# Altium schematic symbol library AudioMoth 1.1.SCHLIB: 220 symbols (part 1 of 3)
Pins are listed as number, name and electrical type; pins without a type are passive.

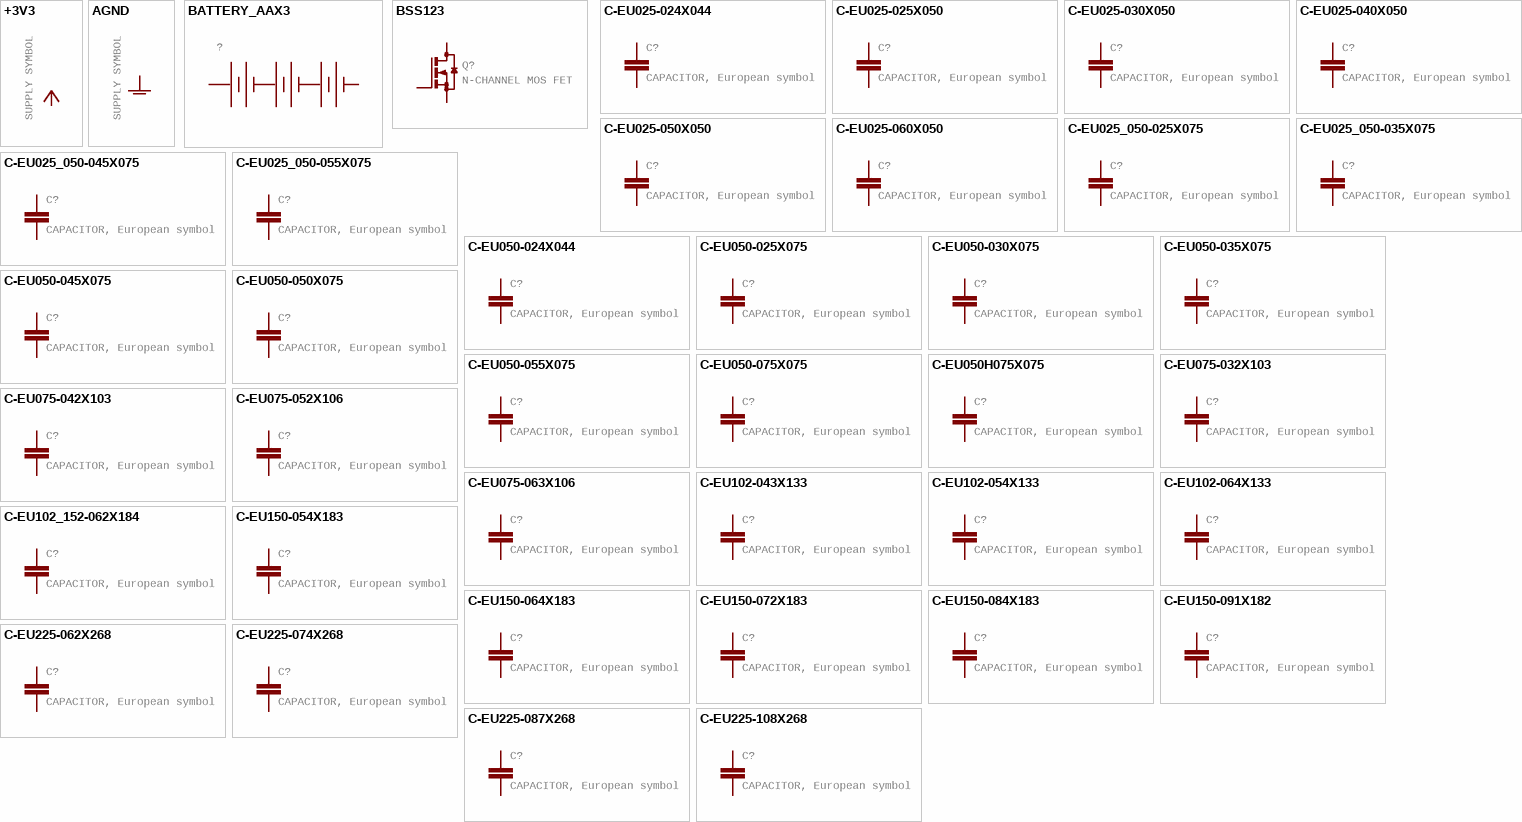
[diagram p0: symbols +3V3 to C-EU225-108X268]

## +3V3
designator +3V3?, comment SUPPLY SYMBOL
GateName_1: G$1; SymbolName_1: +3V3; LibraryName: AudioMoth 1.1.0; DeviceSetName: +3V3
pins: ?1 +3V3 (power)

## AGND
designator AGND?, comment SUPPLY SYMBOL
GateName_1: VR1; SymbolName_1: AGND; LibraryName: AudioMoth 1.1.0; DeviceSetName: AGND
pins: ?1 AGND (power)

## BATTERY_AAX3
designator ?
GateName_1: G$1; SymbolName_1: BATTX3; DeviceSetName: BATTERY_AAX3; LibraryName: AudioMoth 1.1.0; Package: BATTERY-AAX3
footprint BATTERY-AAX3
pins: GND@2 - (power), PWR@1 + (power)

## BSS123
designator Q?, comment N-CHANNEL MOS FET
GateName_1: G$1; SymbolName_1: N-MOS; DeviceSetName: BSS123; LibraryName: AudioMoth 1.1.0; Package: SOT23
footprint SOT23
pins: 1 G, 2 S, 3 D

## C-EU025-024X044
designator C?, comment CAPACITOR, European symbol
GateName_1: G$1; SymbolName_1: C-EU; DeviceName: 025-024X044; LibraryName: AudioMoth 1.1.0; DeviceSetName: C-EU; Package: C025-024X044
footprint C025-024X044
pins: 1, 2

## C-EU025-025X050
designator C?, comment CAPACITOR, European symbol
GateName_1: G$1; SymbolName_1: C-EU; DeviceName: 025-025X050; LibraryName: AudioMoth 1.1.0; DeviceSetName: C-EU; Package: C025-025X050
footprint C025-025X050
pins: 1, 2

## C-EU025-030X050
designator C?, comment CAPACITOR, European symbol
GateName_1: G$1; SymbolName_1: C-EU; DeviceName: 025-030X050; LibraryName: AudioMoth 1.1.0; DeviceSetName: C-EU; Package: C025-030X050
footprint C025-030X050
pins: 1, 2

## C-EU025-040X050
designator C?, comment CAPACITOR, European symbol
GateName_1: G$1; SymbolName_1: C-EU; DeviceName: 025-040X050; LibraryName: AudioMoth 1.1.0; DeviceSetName: C-EU; Package: C025-040X050
footprint C025-040X050
pins: 1, 2

## C-EU025-050X050
designator C?, comment CAPACITOR, European symbol
GateName_1: G$1; SymbolName_1: C-EU; DeviceName: 025-050X050; LibraryName: AudioMoth 1.1.0; DeviceSetName: C-EU; Package: C025-050X050
footprint C025-050X050
pins: 1, 2

## C-EU025-060X050
designator C?, comment CAPACITOR, European symbol
GateName_1: G$1; SymbolName_1: C-EU; DeviceName: 025-060X050; LibraryName: AudioMoth 1.1.0; DeviceSetName: C-EU; Package: C025-060X050
footprint C025-060X050
pins: 1, 2

## C-EU025_050-025X075
designator C?, comment CAPACITOR, European symbol
GateName_1: G$1; SymbolName_1: C-EU; DeviceName: 025_050-025X075; LibraryName: AudioMoth 1.1.0; DeviceSetName: C-EU; Package: C025_050-025X075
footprint C025_050-025X075
pins: 1, 2

## C-EU025_050-035X075
designator C?, comment CAPACITOR, European symbol
GateName_1: G$1; SymbolName_1: C-EU; DeviceName: 025_050-035X075; LibraryName: AudioMoth 1.1.0; DeviceSetName: C-EU; Package: C025_050-035X075
footprint C025_050-035X075
pins: 1, 2

## C-EU025_050-045X075
designator C?, comment CAPACITOR, European symbol
GateName_1: G$1; SymbolName_1: C-EU; DeviceName: 025_050-045X075; LibraryName: AudioMoth 1.1.0; DeviceSetName: C-EU; Package: C025_050-045X075
footprint C025_050-045X075
pins: 1, 2

## C-EU025_050-055X075
designator C?, comment CAPACITOR, European symbol
GateName_1: G$1; SymbolName_1: C-EU; DeviceName: 025_050-055X075; LibraryName: AudioMoth 1.1.0; DeviceSetName: C-EU; Package: C025_050-055X075
footprint C025_050-055X075
pins: 1, 2

## C-EU050-024X044
designator C?, comment CAPACITOR, European symbol
GateName_1: G$1; SymbolName_1: C-EU; DeviceName: 050-024X044; LibraryName: AudioMoth 1.1.0; DeviceSetName: C-EU; Package: C050-024X044
footprint C050-024X044
pins: 1, 2

## C-EU050-025X075
designator C?, comment CAPACITOR, European symbol
GateName_1: G$1; SymbolName_1: C-EU; DeviceName: 050-025X075; LibraryName: AudioMoth 1.1.0; DeviceSetName: C-EU; Package: C050-025X075
footprint C050-025X075
pins: 1, 2

## C-EU050-030X075
designator C?, comment CAPACITOR, European symbol
GateName_1: G$1; SymbolName_1: C-EU; DeviceName: 050-030X075; LibraryName: AudioMoth 1.1.0; DeviceSetName: C-EU; Package: C050-030X075
footprint C050-030X075
pins: 1, 2

## C-EU050-035X075
designator C?, comment CAPACITOR, European symbol
GateName_1: G$1; SymbolName_1: C-EU; DeviceName: 050-035X075; LibraryName: AudioMoth 1.1.0; DeviceSetName: C-EU; Package: C050-035X075
footprint C050-035X075
pins: 1, 2

## C-EU050-045X075
designator C?, comment CAPACITOR, European symbol
GateName_1: G$1; SymbolName_1: C-EU; DeviceName: 050-045X075; LibraryName: AudioMoth 1.1.0; DeviceSetName: C-EU; Package: C050-045X075
footprint C050-045X075
pins: 1, 2

## C-EU050-050X075
designator C?, comment CAPACITOR, European symbol
GateName_1: G$1; SymbolName_1: C-EU; DeviceName: 050-050X075; LibraryName: AudioMoth 1.1.0; DeviceSetName: C-EU; Package: C050-050X075
footprint C050-050X075
pins: 1, 2

## C-EU050-055X075
designator C?, comment CAPACITOR, European symbol
GateName_1: G$1; SymbolName_1: C-EU; DeviceName: 050-055X075; LibraryName: AudioMoth 1.1.0; DeviceSetName: C-EU; Package: C050-055X075
footprint C050-055X075
pins: 1, 2

## C-EU050-075X075
designator C?, comment CAPACITOR, European symbol
GateName_1: G$1; SymbolName_1: C-EU; DeviceName: 050-075X075; LibraryName: AudioMoth 1.1.0; DeviceSetName: C-EU; Package: C050-075X075
footprint C050-075X075
pins: 1, 2

## C-EU050H075X075
designator C?, comment CAPACITOR, European symbol
GateName_1: G$1; SymbolName_1: C-EU; DeviceName: 050H075X075; LibraryName: AudioMoth 1.1.0; DeviceSetName: C-EU; Package: C050H075X075
footprint C050H075X075
pins: 1, 2

## C-EU075-032X103
designator C?, comment CAPACITOR, European symbol
GateName_1: G$1; SymbolName_1: C-EU; DeviceName: 075-032X103; LibraryName: AudioMoth 1.1.0; DeviceSetName: C-EU; Package: C075-032X103
footprint C075-032X103
pins: 1, 2

## C-EU075-042X103
designator C?, comment CAPACITOR, European symbol
GateName_1: G$1; SymbolName_1: C-EU; DeviceName: 075-042X103; LibraryName: AudioMoth 1.1.0; DeviceSetName: C-EU; Package: C075-042X103
footprint C075-042X103
pins: 1, 2

## C-EU075-052X106
designator C?, comment CAPACITOR, European symbol
GateName_1: G$1; SymbolName_1: C-EU; DeviceName: 075-052X106; LibraryName: AudioMoth 1.1.0; DeviceSetName: C-EU; Package: C075-052X106
footprint C075-052X106
pins: 1, 2

## C-EU075-063X106
designator C?, comment CAPACITOR, European symbol
GateName_1: G$1; SymbolName_1: C-EU; DeviceName: 075-063X106; LibraryName: AudioMoth 1.1.0; DeviceSetName: C-EU; Package: C075-063X106
footprint C075-063X106
pins: 1, 2

## C-EU102-043X133
designator C?, comment CAPACITOR, European symbol
GateName_1: G$1; SymbolName_1: C-EU; DeviceName: 102-043X133; LibraryName: AudioMoth 1.1.0; DeviceSetName: C-EU; Package: C102-043X133
footprint C102-043X133
pins: 1, 2

## C-EU102-054X133
designator C?, comment CAPACITOR, European symbol
GateName_1: G$1; SymbolName_1: C-EU; DeviceName: 102-054X133; LibraryName: AudioMoth 1.1.0; DeviceSetName: C-EU; Package: C102-054X133
footprint C102-054X133
pins: 1, 2

## C-EU102-064X133
designator C?, comment CAPACITOR, European symbol
GateName_1: G$1; SymbolName_1: C-EU; DeviceName: 102-064X133; LibraryName: AudioMoth 1.1.0; DeviceSetName: C-EU; Package: C102-064X133
footprint C102-064X133
pins: 1, 2

## C-EU102_152-062X184
designator C?, comment CAPACITOR, European symbol
GateName_1: G$1; SymbolName_1: C-EU; DeviceName: 102_152-062X184; LibraryName: AudioMoth 1.1.0; DeviceSetName: C-EU; Package: C102_152-062X184
footprint C102_152-062X184
pins: 1, 2

## C-EU150-054X183
designator C?, comment CAPACITOR, European symbol
GateName_1: G$1; SymbolName_1: C-EU; DeviceName: 150-054X183; LibraryName: AudioMoth 1.1.0; DeviceSetName: C-EU; Package: C150-054X183
footprint C150-054X183
pins: 1, 2

## C-EU150-064X183
designator C?, comment CAPACITOR, European symbol
GateName_1: G$1; SymbolName_1: C-EU; DeviceName: 150-064X183; LibraryName: AudioMoth 1.1.0; DeviceSetName: C-EU; Package: C150-064X183
footprint C150-064X183
pins: 1, 2

## C-EU150-072X183
designator C?, comment CAPACITOR, European symbol
GateName_1: G$1; SymbolName_1: C-EU; DeviceName: 150-072X183; LibraryName: AudioMoth 1.1.0; DeviceSetName: C-EU; Package: C150-072X183
footprint C150-072X183
pins: 1, 2

## C-EU150-084X183
designator C?, comment CAPACITOR, European symbol
GateName_1: G$1; SymbolName_1: C-EU; DeviceName: 150-084X183; LibraryName: AudioMoth 1.1.0; DeviceSetName: C-EU; Package: C150-084X183
footprint C150-084X183
pins: 1, 2

## C-EU150-091X182
designator C?, comment CAPACITOR, European symbol
GateName_1: G$1; SymbolName_1: C-EU; DeviceName: 150-091X182; LibraryName: AudioMoth 1.1.0; DeviceSetName: C-EU; Package: C150-091X182
footprint C150-091X182
pins: 1, 2

## C-EU225-062X268
designator C?, comment CAPACITOR, European symbol
GateName_1: G$1; SymbolName_1: C-EU; DeviceName: 225-062X268; LibraryName: AudioMoth 1.1.0; DeviceSetName: C-EU; Package: C225-062X268
footprint C225-062X268
pins: 1, 2

## C-EU225-074X268
designator C?, comment CAPACITOR, European symbol
GateName_1: G$1; SymbolName_1: C-EU; DeviceName: 225-074X268; LibraryName: AudioMoth 1.1.0; DeviceSetName: C-EU; Package: C225-074X268
footprint C225-074X268
pins: 1, 2

## C-EU225-087X268
designator C?, comment CAPACITOR, European symbol
GateName_1: G$1; SymbolName_1: C-EU; DeviceName: 225-087X268; LibraryName: AudioMoth 1.1.0; DeviceSetName: C-EU; Package: C225-087X268
footprint C225-087X268
pins: 1, 2

## C-EU225-108X268
designator C?, comment CAPACITOR, European symbol
GateName_1: G$1; SymbolName_1: C-EU; DeviceName: 225-108X268; LibraryName: AudioMoth 1.1.0; DeviceSetName: C-EU; Package: C225-108X268
footprint C225-108X268
pins: 1, 2

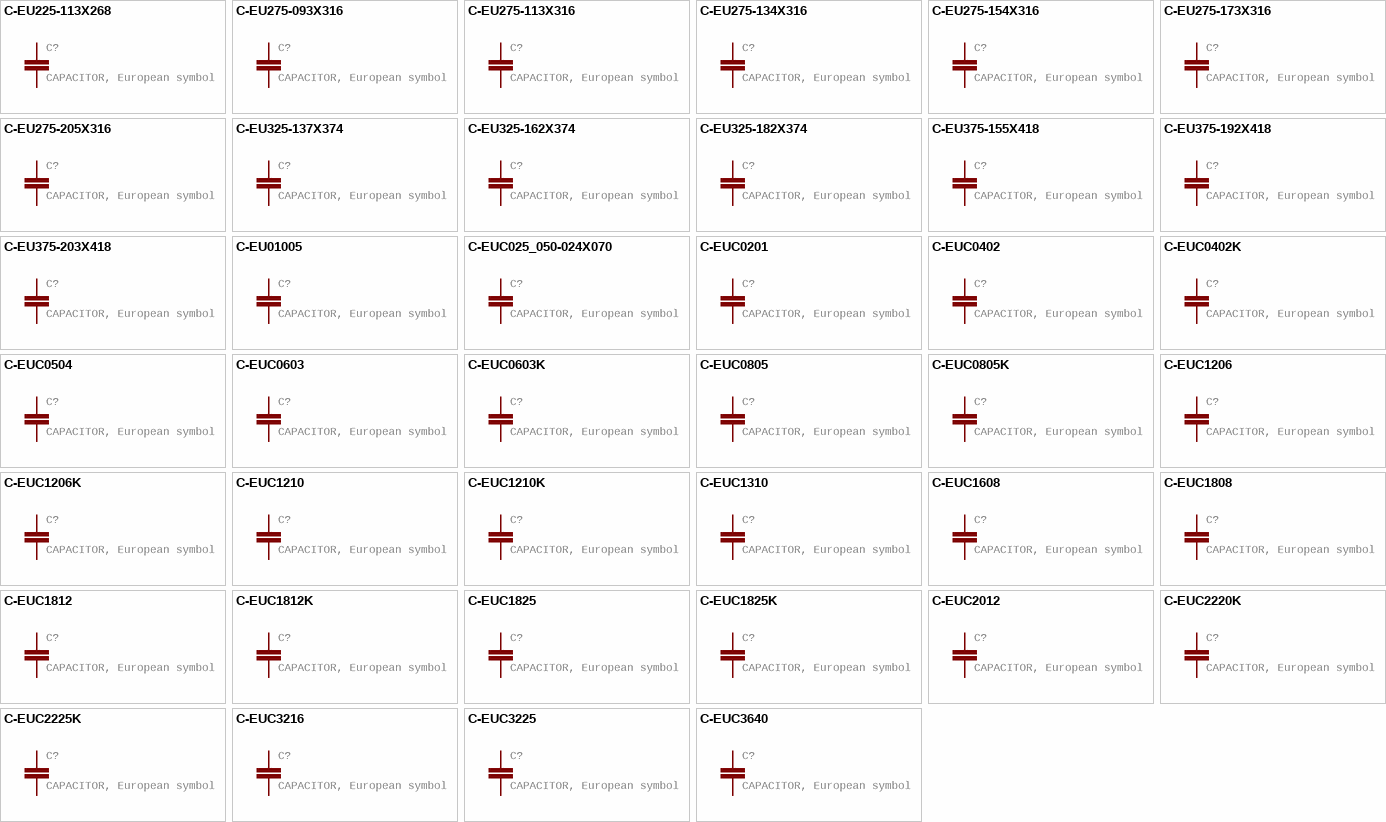
[diagram p1: symbols C-EU225-113X268 to C-EUC3640]

## C-EU225-113X268
designator C?, comment CAPACITOR, European symbol
GateName_1: G$1; SymbolName_1: C-EU; DeviceName: 225-113X268; LibraryName: AudioMoth 1.1.0; DeviceSetName: C-EU; Package: C225-113X268
footprint C225-113X268
pins: 1, 2

## C-EU275-093X316
designator C?, comment CAPACITOR, European symbol
GateName_1: G$1; SymbolName_1: C-EU; DeviceName: 275-093X316; LibraryName: AudioMoth 1.1.0; DeviceSetName: C-EU; Package: C275-093X316
footprint C275-093X316
pins: 1, 2

## C-EU275-113X316
designator C?, comment CAPACITOR, European symbol
GateName_1: G$1; SymbolName_1: C-EU; DeviceName: 275-113X316; LibraryName: AudioMoth 1.1.0; DeviceSetName: C-EU; Package: C275-113X316
footprint C275-113X316
pins: 1, 2

## C-EU275-134X316
designator C?, comment CAPACITOR, European symbol
GateName_1: G$1; SymbolName_1: C-EU; DeviceName: 275-134X316; LibraryName: AudioMoth 1.1.0; DeviceSetName: C-EU; Package: C275-134X316
footprint C275-134X316
pins: 1, 2

## C-EU275-154X316
designator C?, comment CAPACITOR, European symbol
GateName_1: G$1; SymbolName_1: C-EU; DeviceName: 275-154X316; LibraryName: AudioMoth 1.1.0; DeviceSetName: C-EU; Package: C275-154X316
footprint C275-154X316
pins: 1, 2

## C-EU275-173X316
designator C?, comment CAPACITOR, European symbol
GateName_1: G$1; SymbolName_1: C-EU; DeviceName: 275-173X316; LibraryName: AudioMoth 1.1.0; DeviceSetName: C-EU; Package: C275-173X316
footprint C275-173X316
pins: 1, 2

## C-EU275-205X316
designator C?, comment CAPACITOR, European symbol
GateName_1: G$1; SymbolName_1: C-EU; DeviceName: 275-205X316; LibraryName: AudioMoth 1.1.0; DeviceSetName: C-EU; Package: C275-205X316
footprint C275-205X316
pins: 1, 2

## C-EU325-137X374
designator C?, comment CAPACITOR, European symbol
GateName_1: G$1; SymbolName_1: C-EU; DeviceName: 325-137X374; LibraryName: AudioMoth 1.1.0; DeviceSetName: C-EU; Package: C325-137X374
footprint C325-137X374
pins: 1, 2

## C-EU325-162X374
designator C?, comment CAPACITOR, European symbol
GateName_1: G$1; SymbolName_1: C-EU; DeviceName: 325-162X374; LibraryName: AudioMoth 1.1.0; DeviceSetName: C-EU; Package: C325-162X374
footprint C325-162X374
pins: 1, 2

## C-EU325-182X374
designator C?, comment CAPACITOR, European symbol
GateName_1: G$1; SymbolName_1: C-EU; DeviceName: 325-182X374; LibraryName: AudioMoth 1.1.0; DeviceSetName: C-EU; Package: C325-182X374
footprint C325-182X374
pins: 1, 2

## C-EU375-155X418
designator C?, comment CAPACITOR, European symbol
GateName_1: G$1; SymbolName_1: C-EU; DeviceName: 375-155X418; LibraryName: AudioMoth 1.1.0; DeviceSetName: C-EU; Package: C375-155X418
footprint C375-155X418
pins: 1, 2

## C-EU375-192X418
designator C?, comment CAPACITOR, European symbol
GateName_1: G$1; SymbolName_1: C-EU; DeviceName: 375-192X418; LibraryName: AudioMoth 1.1.0; DeviceSetName: C-EU; Package: C375-192X418
footprint C375-192X418
pins: 1, 2

## C-EU375-203X418
designator C?, comment CAPACITOR, European symbol
GateName_1: G$1; SymbolName_1: C-EU; DeviceName: 375-203X418; LibraryName: AudioMoth 1.1.0; DeviceSetName: C-EU; Package: C375-203X418
footprint C375-203X418
pins: 1, 2

## C-EU01005
designator C?, comment CAPACITOR, European symbol
GateName_1: G$1; SymbolName_1: C-EU; DeviceName: 01005; LibraryName: AudioMoth 1.1.0; DeviceSetName: C-EU; Package: C01005
footprint C01005
pins: 1, 2

## C-EUC025_050-024X070
designator C?, comment CAPACITOR, European symbol
GateName_1: G$1; SymbolName_1: C-EU; DeviceName: C025_050-024X070; LibraryName: AudioMoth 1.1.0; DeviceSetName: C-EU; Package: C025_050-024X070
footprint C025_050-024X070
pins: 1, 2

## C-EUC0201
designator C?, comment CAPACITOR, European symbol
GateName_1: G$1; SymbolName_1: C-EU; DeviceName: C0201; LibraryName: AudioMoth 1.1.0; DeviceSetName: C-EU; Package: C0201
footprint C0201
pins: 1, 2

## C-EUC0402
designator C?, comment CAPACITOR, European symbol
GateName_1: G$1; SymbolName_1: C-EU; DeviceName: C0402; LibraryName: AudioMoth 1.1.0; DeviceSetName: C-EU; Package: C0402
footprint C0402
pins: 1, 2

## C-EUC0402K
designator C?, comment CAPACITOR, European symbol
GateName_1: G$1; SymbolName_1: C-EU; DeviceName: C0402K; LibraryName: AudioMoth 1.1.0; DeviceSetName: C-EU; Package: C0402K
footprint C0402K
pins: 1, 2

## C-EUC0504
designator C?, comment CAPACITOR, European symbol
GateName_1: G$1; SymbolName_1: C-EU; DeviceName: C0504; LibraryName: AudioMoth 1.1.0; DeviceSetName: C-EU; Package: C0504
footprint C0504
pins: 1, 2

## C-EUC0603
designator C?, comment CAPACITOR, European symbol
GateName_1: G$1; SymbolName_1: C-EU; DeviceName: C0603; LibraryName: AudioMoth 1.1.0; DeviceSetName: C-EU; Package: C0603
footprint C0603
pins: 1, 2

## C-EUC0603K
designator C?, comment CAPACITOR, European symbol
GateName_1: G$1; SymbolName_1: C-EU; DeviceName: C0603K; LibraryName: AudioMoth 1.1.0; DeviceSetName: C-EU; Package: C0603K
footprint C0603K
pins: 1, 2

## C-EUC0805
designator C?, comment CAPACITOR, European symbol
GateName_1: G$1; SymbolName_1: C-EU; DeviceName: C0805; LibraryName: AudioMoth 1.1.0; DeviceSetName: C-EU; Package: C0805
footprint C0805
pins: 1, 2

## C-EUC0805K
designator C?, comment CAPACITOR, European symbol
GateName_1: G$1; SymbolName_1: C-EU; DeviceName: C0805K; LibraryName: AudioMoth 1.1.0; DeviceSetName: C-EU; Package: C0805K
footprint C0805K
pins: 1, 2

## C-EUC1206
designator C?, comment CAPACITOR, European symbol
GateName_1: G$1; SymbolName_1: C-EU; DeviceName: C1206; LibraryName: AudioMoth 1.1.0; DeviceSetName: C-EU; Package: C1206
footprint C1206
pins: 1, 2

## C-EUC1206K
designator C?, comment CAPACITOR, European symbol
GateName_1: G$1; SymbolName_1: C-EU; DeviceName: C1206K; LibraryName: AudioMoth 1.1.0; DeviceSetName: C-EU; Package: C1206K
footprint C1206K
pins: 1, 2

## C-EUC1210
designator C?, comment CAPACITOR, European symbol
GateName_1: G$1; SymbolName_1: C-EU; DeviceName: C1210; LibraryName: AudioMoth 1.1.0; DeviceSetName: C-EU; Package: C1210
footprint C1210
pins: 1, 2

## C-EUC1210K
designator C?, comment CAPACITOR, European symbol
GateName_1: G$1; SymbolName_1: C-EU; DeviceName: C1210K; LibraryName: AudioMoth 1.1.0; DeviceSetName: C-EU; Package: C1210K
footprint C1210K
pins: 1, 2

## C-EUC1310
designator C?, comment CAPACITOR, European symbol
GateName_1: G$1; SymbolName_1: C-EU; DeviceName: C1310; LibraryName: AudioMoth 1.1.0; DeviceSetName: C-EU; Package: C1310
footprint C1310
pins: 1, 2

## C-EUC1608
designator C?, comment CAPACITOR, European symbol
GateName_1: G$1; SymbolName_1: C-EU; DeviceName: C1608; LibraryName: AudioMoth 1.1.0; DeviceSetName: C-EU; Package: C1608
footprint C1608
pins: 1, 2

## C-EUC1808
designator C?, comment CAPACITOR, European symbol
GateName_1: G$1; SymbolName_1: C-EU; DeviceName: C1808; LibraryName: AudioMoth 1.1.0; DeviceSetName: C-EU; Package: C1808
footprint C1808
pins: 1, 2

## C-EUC1812
designator C?, comment CAPACITOR, European symbol
GateName_1: G$1; SymbolName_1: C-EU; DeviceName: C1812; LibraryName: AudioMoth 1.1.0; DeviceSetName: C-EU; Package: C1812
footprint C1812
pins: 1, 2

## C-EUC1812K
designator C?, comment CAPACITOR, European symbol
GateName_1: G$1; SymbolName_1: C-EU; DeviceName: C1812K; LibraryName: AudioMoth 1.1.0; DeviceSetName: C-EU; Package: C1812K
footprint C1812K
pins: 1, 2

## C-EUC1825
designator C?, comment CAPACITOR, European symbol
GateName_1: G$1; SymbolName_1: C-EU; DeviceName: C1825; LibraryName: AudioMoth 1.1.0; DeviceSetName: C-EU; Package: C1825
footprint C1825
pins: 1, 2

## C-EUC1825K
designator C?, comment CAPACITOR, European symbol
GateName_1: G$1; SymbolName_1: C-EU; DeviceName: C1825K; LibraryName: AudioMoth 1.1.0; DeviceSetName: C-EU; Package: C1825K
footprint C1825K
pins: 1, 2

## C-EUC2012
designator C?, comment CAPACITOR, European symbol
GateName_1: G$1; SymbolName_1: C-EU; DeviceName: C2012; LibraryName: AudioMoth 1.1.0; DeviceSetName: C-EU; Package: C2012
footprint C2012
pins: 1, 2

## C-EUC2220K
designator C?, comment CAPACITOR, European symbol
GateName_1: G$1; SymbolName_1: C-EU; DeviceName: C2220K; LibraryName: AudioMoth 1.1.0; DeviceSetName: C-EU; Package: C2220K
footprint C2220K
pins: 1, 2

## C-EUC2225K
designator C?, comment CAPACITOR, European symbol
GateName_1: G$1; SymbolName_1: C-EU; DeviceName: C2225K; LibraryName: AudioMoth 1.1.0; DeviceSetName: C-EU; Package: C2225K
footprint C2225K
pins: 1, 2

## C-EUC3216
designator C?, comment CAPACITOR, European symbol
GateName_1: G$1; SymbolName_1: C-EU; DeviceName: C3216; LibraryName: AudioMoth 1.1.0; DeviceSetName: C-EU; Package: C3216
footprint C3216
pins: 1, 2

## C-EUC3225
designator C?, comment CAPACITOR, European symbol
GateName_1: G$1; SymbolName_1: C-EU; DeviceName: C3225; LibraryName: AudioMoth 1.1.0; DeviceSetName: C-EU; Package: C3225
footprint C3225
pins: 1, 2

## C-EUC3640
designator C?, comment CAPACITOR, European symbol
GateName_1: G$1; SymbolName_1: C-EU; DeviceName: C3640; LibraryName: AudioMoth 1.1.0; DeviceSetName: C-EU; Package: C3640
footprint C3640
pins: 1, 2

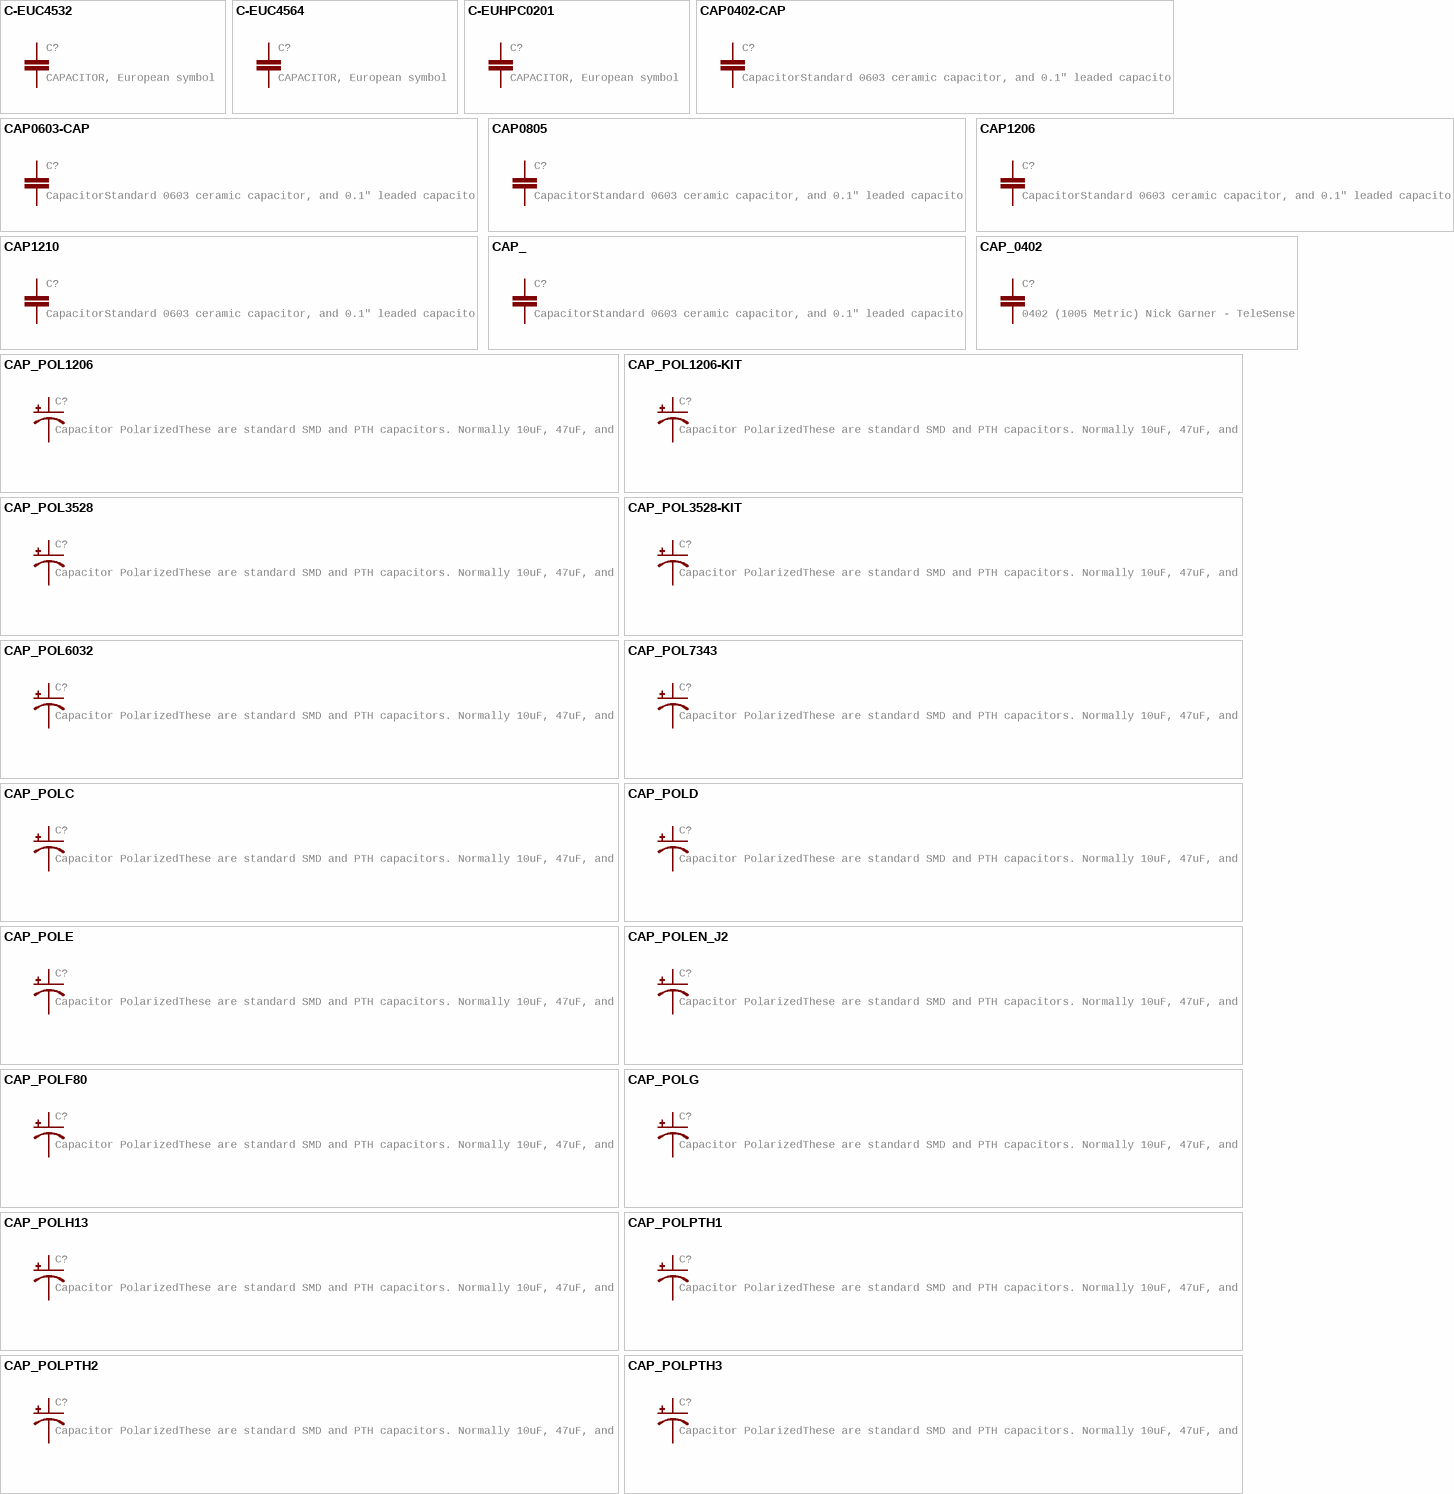
[diagram p2: symbols C-EUC4532 to CAP_POLPTH3]

## C-EUC4532
designator C?, comment CAPACITOR, European symbol
GateName_1: G$1; SymbolName_1: C-EU; DeviceName: C4532; LibraryName: AudioMoth 1.1.0; DeviceSetName: C-EU; Package: C4532
footprint C4532
pins: 1, 2

## C-EUC4564
designator C?, comment CAPACITOR, European symbol
GateName_1: G$1; SymbolName_1: C-EU; DeviceName: C4564; LibraryName: AudioMoth 1.1.0; DeviceSetName: C-EU; Package: C4564
footprint C4564
pins: 1, 2

## C-EUHPC0201
designator C?, comment CAPACITOR, European symbol
GateName_1: G$1; SymbolName_1: C-EU; DeviceName: HPC0201; LibraryName: AudioMoth 1.1.0; DeviceSetName: C-EU; Package: HPC0201
footprint HPC0201
pins: 1, 2

## CAP0402-CAP
designator C?, comment CapacitorStandard 0603 ceramic capacitor, and 0.1" leaded capacitor.
GateName_1: G$1; SymbolName_1: CAP; DeviceName: 0402-CAP; LibraryName: AudioMoth 1.1.0; DeviceSetName: CAP; Package: 0402-CAP
footprint 0402-CAP
pins: 1, 2

## CAP0603-CAP
designator C?, comment CapacitorStandard 0603 ceramic capacitor, and 0.1" leaded capacitor.
GateName_1: G$1; SymbolName_1: CAP; DeviceName: 0603-CAP; LibraryName: AudioMoth 1.1.0; DeviceSetName: CAP; Package: 0603-CAP
footprint 0603-CAP
pins: 1, 2

## CAP0805
designator C?, comment CapacitorStandard 0603 ceramic capacitor, and 0.1" leaded capacitor.
GateName_1: G$1; SymbolName_1: CAP; DeviceName: 0805; LibraryName: AudioMoth 1.1.0; DeviceSetName: CAP; Package: 0805
footprint 0805
pins: 1, 2

## CAP1206
designator C?, comment CapacitorStandard 0603 ceramic capacitor, and 0.1" leaded capacitor.
GateName_1: G$1; SymbolName_1: CAP; DeviceName: 1206; LibraryName: AudioMoth 1.1.0; DeviceSetName: CAP; Package: 1206
footprint 1206
pins: 1, 2

## CAP1210
designator C?, comment CapacitorStandard 0603 ceramic capacitor, and 0.1" leaded capacitor.
GateName_1: G$1; SymbolName_1: CAP; DeviceName: 1210; LibraryName: AudioMoth 1.1.0; DeviceSetName: CAP; Package: 1210
footprint 1210
pins: 1, 2

## CAP_
designator C?, comment CapacitorStandard 0603 ceramic capacitor, and 0.1" leaded capacitor.
GateName_1: G$1; SymbolName_1: CAP; DeviceName: _; LibraryName: AudioMoth 1.1.0; DeviceSetName: CAP; Package: AXIAL-5MM
footprint AXIAL-5MM
pins: P$1 1, P$2 2

## CAP_0402
designator C?, comment 0402 (1005 Metric) Nick Garner - TeleSense
GateName_1: G$1; SymbolName_1: CAP; DeviceSetName: CAP_0402; LibraryName: AudioMoth 1.1.0; Package: 0402
footprint 0402
pins: 1, 2

## CAP_POL1206
designator C?, comment Capacitor PolarizedThese are standard SMD and PTH capacitors. Normally 10uF, 47uF, and 100uF in electrolytic and tantalum varieties. Always verify the external diameter of the through hole cap, it varies with capacity, voltage, and manufacturer. The EIA devices should be standard.
GateName_1: G$1; SymbolName_1: CAP_POL; DeviceName: 1206; LibraryName: AudioMoth 1.1.0; DeviceSetName: CAP_POL; Package: EIA3216
footprint EIA3216
pins: A +, C -

## CAP_POL1206-KIT
designator C?, comment Capacitor PolarizedThese are standard SMD and PTH capacitors. Normally 10uF, 47uF, and 100uF in electrolytic and tantalum varieties. Always verify the external diameter of the through hole cap, it varies with capacity, voltage, and manufacturer. The EIA devices should be standard.
GateName_1: G$1; SymbolName_1: CAP_POL; DeviceName: 1206-KIT; LibraryName: AudioMoth 1.1.0; DeviceSetName: CAP_POL; Package: EIA3216-KIT
footprint EIA3216-KIT
pins: A +, C -

## CAP_POL3528
designator C?, comment Capacitor PolarizedThese are standard SMD and PTH capacitors. Normally 10uF, 47uF, and 100uF in electrolytic and tantalum varieties. Always verify the external diameter of the through hole cap, it varies with capacity, voltage, and manufacturer. The EIA devices should be standard.
GateName_1: G$1; SymbolName_1: CAP_POL; DeviceName: 3528; LibraryName: AudioMoth 1.1.0; DeviceSetName: CAP_POL; Package: EIA3528
footprint EIA3528
pins: A +, C -

## CAP_POL3528-KIT
designator C?, comment Capacitor PolarizedThese are standard SMD and PTH capacitors. Normally 10uF, 47uF, and 100uF in electrolytic and tantalum varieties. Always verify the external diameter of the through hole cap, it varies with capacity, voltage, and manufacturer. The EIA devices should be standard.
GateName_1: G$1; SymbolName_1: CAP_POL; DeviceName: 3528-KIT; LibraryName: AudioMoth 1.1.0; DeviceSetName: CAP_POL; Package: EIA3528-KIT
footprint EIA3528-KIT
pins: A +, C -

## CAP_POL6032
designator C?, comment Capacitor PolarizedThese are standard SMD and PTH capacitors. Normally 10uF, 47uF, and 100uF in electrolytic and tantalum varieties. Always verify the external diameter of the through hole cap, it varies with capacity, voltage, and manufacturer. The EIA devices should be standard.
GateName_1: G$1; SymbolName_1: CAP_POL; DeviceName: 6032; LibraryName: AudioMoth 1.1.0; DeviceSetName: CAP_POL; Package: EIA6032
footprint EIA6032
pins: P$1 +, P$2 -

## CAP_POL7343
designator C?, comment Capacitor PolarizedThese are standard SMD and PTH capacitors. Normally 10uF, 47uF, and 100uF in electrolytic and tantalum varieties. Always verify the external diameter of the through hole cap, it varies with capacity, voltage, and manufacturer. The EIA devices should be standard.
GateName_1: G$1; SymbolName_1: CAP_POL; DeviceName: 7343; LibraryName: AudioMoth 1.1.0; DeviceSetName: CAP_POL; Package: EIA7343
footprint EIA7343
pins: A +, C -

## CAP_POLC
designator C?, comment Capacitor PolarizedThese are standard SMD and PTH capacitors. Normally 10uF, 47uF, and 100uF in electrolytic and tantalum varieties. Always verify the external diameter of the through hole cap, it varies with capacity, voltage, and manufacturer. The EIA devices should be standard.
GateName_1: G$1; SymbolName_1: CAP_POL; DeviceName: C; LibraryName: AudioMoth 1.1.0; DeviceSetName: CAP_POL; Package: PANASONIC_C
footprint PANASONIC_C
pins: +, -

## CAP_POLD
designator C?, comment Capacitor PolarizedThese are standard SMD and PTH capacitors. Normally 10uF, 47uF, and 100uF in electrolytic and tantalum varieties. Always verify the external diameter of the through hole cap, it varies with capacity, voltage, and manufacturer. The EIA devices should be standard.
GateName_1: G$1; SymbolName_1: CAP_POL; DeviceName: D; LibraryName: AudioMoth 1.1.0; DeviceSetName: CAP_POL; Package: PANASONIC_D
footprint PANASONIC_D
pins: +, -

## CAP_POLE
designator C?, comment Capacitor PolarizedThese are standard SMD and PTH capacitors. Normally 10uF, 47uF, and 100uF in electrolytic and tantalum varieties. Always verify the external diameter of the through hole cap, it varies with capacity, voltage, and manufacturer. The EIA devices should be standard.
GateName_1: G$1; SymbolName_1: CAP_POL; DeviceName: E; LibraryName: AudioMoth 1.1.0; DeviceSetName: CAP_POL; Package: PANASONIC_E
footprint PANASONIC_E
pins: +, -

## CAP_POLEN_J2
designator C?, comment Capacitor PolarizedThese are standard SMD and PTH capacitors. Normally 10uF, 47uF, and 100uF in electrolytic and tantalum varieties. Always verify the external diameter of the through hole cap, it varies with capacity, voltage, and manufacturer. The EIA devices should be standard.
GateName_1: G$1; SymbolName_1: CAP_POL; DeviceName: EN_J2; LibraryName: AudioMoth 1.1.0; DeviceSetName: CAP_POL; Package: EN_J2
footprint EN_J2
pins: +, -

## CAP_POLF80
designator C?, comment Capacitor PolarizedThese are standard SMD and PTH capacitors. Normally 10uF, 47uF, and 100uF in electrolytic and tantalum varieties. Always verify the external diameter of the through hole cap, it varies with capacity, voltage, and manufacturer. The EIA devices should be standard.
GateName_1: G$1; SymbolName_1: CAP_POL; DeviceName: F80; LibraryName: AudioMoth 1.1.0; DeviceSetName: CAP_POL; Package: NIPPON_F80
footprint NIPPON_F80
pins: +, -

## CAP_POLG
designator C?, comment Capacitor PolarizedThese are standard SMD and PTH capacitors. Normally 10uF, 47uF, and 100uF in electrolytic and tantalum varieties. Always verify the external diameter of the through hole cap, it varies with capacity, voltage, and manufacturer. The EIA devices should be standard.
GateName_1: G$1; SymbolName_1: CAP_POL; DeviceName: G; LibraryName: AudioMoth 1.1.0; DeviceSetName: CAP_POL; Package: PANASONIC_G
footprint PANASONIC_G
pins: +, -

## CAP_POLH13
designator C?, comment Capacitor PolarizedThese are standard SMD and PTH capacitors. Normally 10uF, 47uF, and 100uF in electrolytic and tantalum varieties. Always verify the external diameter of the through hole cap, it varies with capacity, voltage, and manufacturer. The EIA devices should be standard.
GateName_1: G$1; SymbolName_1: CAP_POL; DeviceName: H13; LibraryName: AudioMoth 1.1.0; DeviceSetName: CAP_POL; Package: PANASONIC_H13
footprint PANASONIC_H13
pins: +, -

## CAP_POLPTH1
designator C?, comment Capacitor PolarizedThese are standard SMD and PTH capacitors. Normally 10uF, 47uF, and 100uF in electrolytic and tantalum varieties. Always verify the external diameter of the through hole cap, it varies with capacity, voltage, and manufacturer. The EIA devices should be standard.
GateName_1: G$1; SymbolName_1: CAP_POL; DeviceName: PTH1; LibraryName: AudioMoth 1.1.0; DeviceSetName: CAP_POL; Package: CPOL-RADIAL-100UF-25V
footprint CPOL-RADIAL-100UF-25V
pins: 1 +, 2 -

## CAP_POLPTH2
designator C?, comment Capacitor PolarizedThese are standard SMD and PTH capacitors. Normally 10uF, 47uF, and 100uF in electrolytic and tantalum varieties. Always verify the external diameter of the through hole cap, it varies with capacity, voltage, and manufacturer. The EIA devices should be standard.
GateName_1: G$1; SymbolName_1: CAP_POL; DeviceName: PTH2; LibraryName: AudioMoth 1.1.0; DeviceSetName: CAP_POL; Package: CPOL-RADIAL-10UF-25V
footprint CPOL-RADIAL-10UF-25V
pins: 1 +, 2 -

## CAP_POLPTH3
designator C?, comment Capacitor PolarizedThese are standard SMD and PTH capacitors. Normally 10uF, 47uF, and 100uF in electrolytic and tantalum varieties. Always verify the external diameter of the through hole cap, it varies with capacity, voltage, and manufacturer. The EIA devices should be standard.
GateName_1: G$1; SymbolName_1: CAP_POL; DeviceName: PTH3; LibraryName: AudioMoth 1.1.0; DeviceSetName: CAP_POL; Package: CPOL-RADIAL-1000UF-63V
footprint CPOL-RADIAL-1000UF-63V
pins: 1 +, 2 -

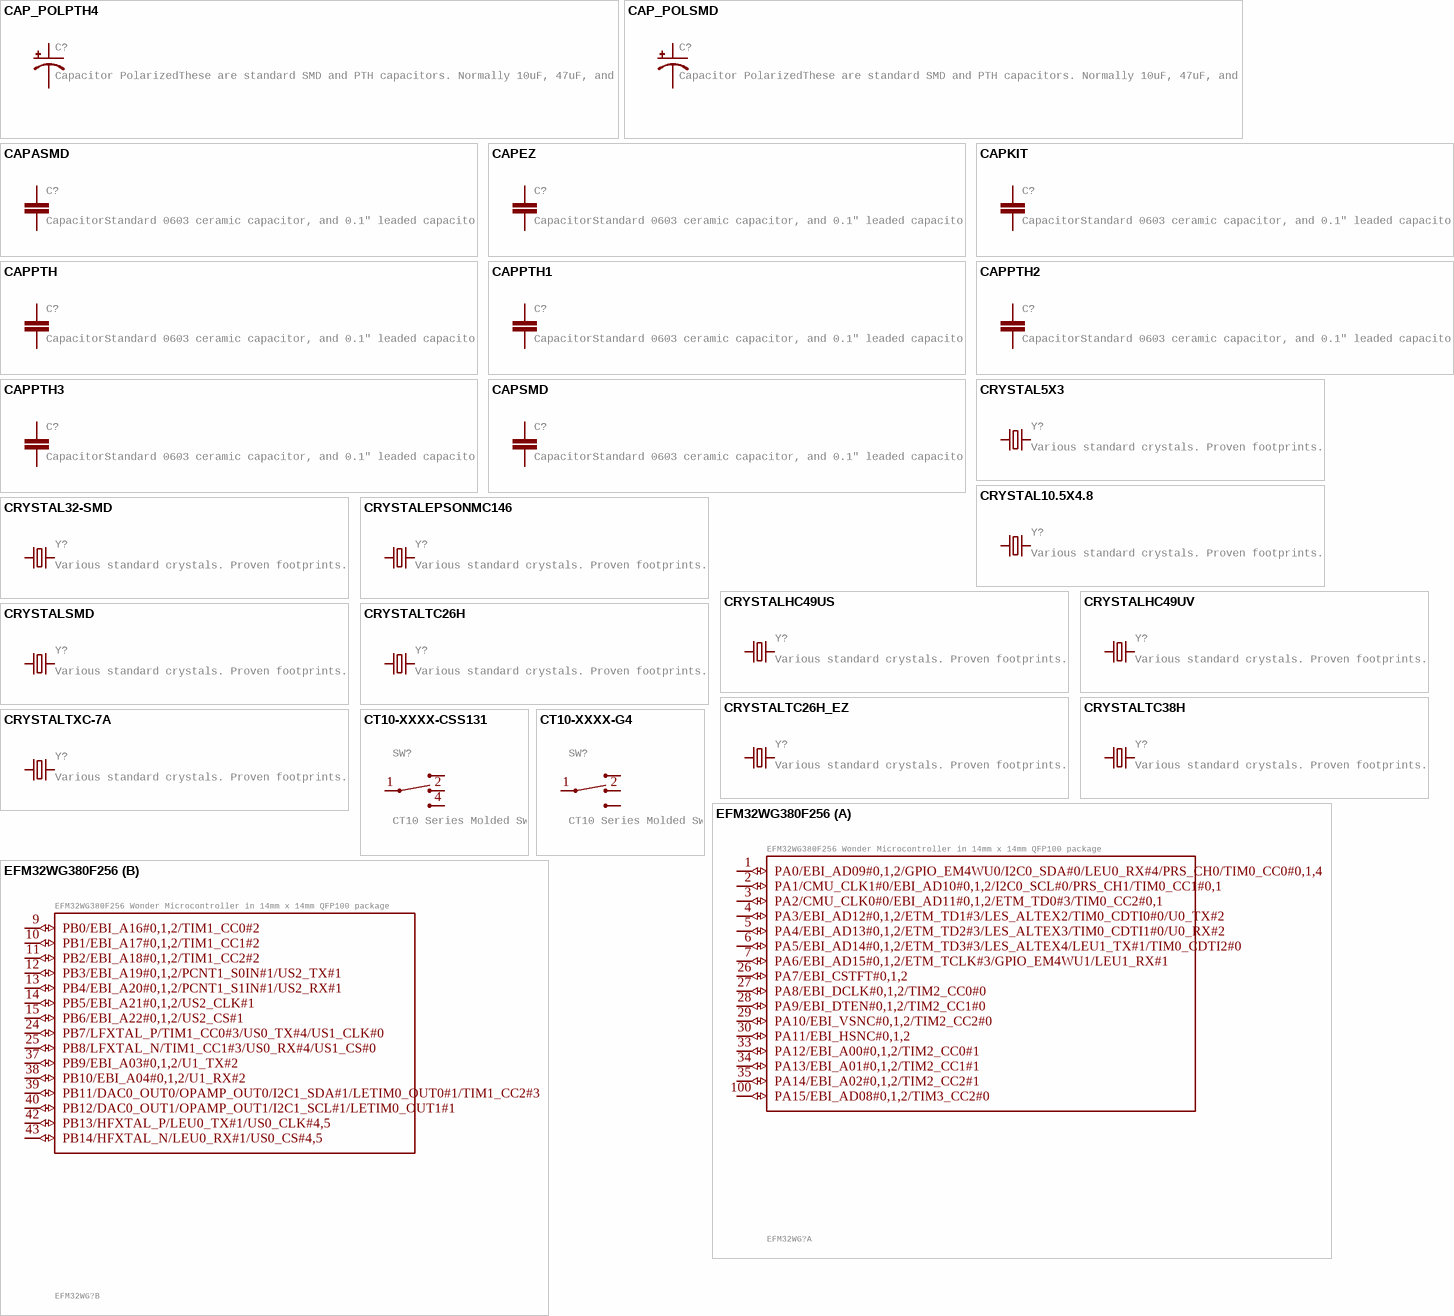
[diagram p3: symbols CAP_POLPTH4 to EFM32WG380F256]

## CAP_POLPTH4
designator C?, comment Capacitor PolarizedThese are standard SMD and PTH capacitors. Normally 10uF, 47uF, and 100uF in electrolytic and tantalum varieties. Always verify the external diameter of the through hole cap, it varies with capacity, voltage, and manufacturer. The EIA devices should be standard.
GateName_1: G$1; SymbolName_1: CAP_POL; DeviceName: PTH4; LibraryName: AudioMoth 1.1.0; DeviceSetName: CAP_POL; Package: CPOL-RADIAL-1000UF-25V
footprint CPOL-RADIAL-1000UF-25V
pins: 1 +, 2 -

## CAP_POLSMD
designator C?, comment Capacitor PolarizedThese are standard SMD and PTH capacitors. Normally 10uF, 47uF, and 100uF in electrolytic and tantalum varieties. Always verify the external diameter of the through hole cap, it varies with capacity, voltage, and manufacturer. The EIA devices should be standard.
GateName_1: G$1; SymbolName_1: CAP_POL; DeviceName: SMD; LibraryName: AudioMoth 1.1.0; DeviceSetName: CAP_POL; Package: VISHAY_C
footprint VISHAY_C
pins: +, -

## CAPASMD
designator C?, comment CapacitorStandard 0603 ceramic capacitor, and 0.1" leaded capacitor.
GateName_1: G$1; SymbolName_1: CAP; DeviceName: ASMD; LibraryName: AudioMoth 1.1.0; DeviceSetName: CAP; Package: CTZ3
footprint CTZ3
pins: + 1, - 2

## CAPEZ
designator C?, comment CapacitorStandard 0603 ceramic capacitor, and 0.1" leaded capacitor.
GateName_1: G$1; SymbolName_1: CAP; DeviceName: EZ; LibraryName: AudioMoth 1.1.0; DeviceSetName: CAP; Package: CAP-PTH-SMALLEZ
footprint CAP-PTH-SMALLEZ
pins: 1, 2

## CAPKIT
designator C?, comment CapacitorStandard 0603 ceramic capacitor, and 0.1" leaded capacitor.
GateName_1: G$1; SymbolName_1: CAP; DeviceName: KIT; LibraryName: AudioMoth 1.1.0; DeviceSetName: CAP; Package: CAP-PTH-SMALL-KIT
footprint CAP-PTH-SMALL-KIT
pins: 1, 2

## CAPPTH
designator C?, comment CapacitorStandard 0603 ceramic capacitor, and 0.1" leaded capacitor.
GateName_1: G$1; SymbolName_1: CAP; DeviceName: PTH; LibraryName: AudioMoth 1.1.0; DeviceSetName: CAP; Package: CAP-PTH-SMALL
footprint CAP-PTH-SMALL
pins: 1, 2

## CAPPTH1
designator C?, comment CapacitorStandard 0603 ceramic capacitor, and 0.1" leaded capacitor.
GateName_1: G$1; SymbolName_1: CAP; DeviceName: PTH1; LibraryName: AudioMoth 1.1.0; DeviceSetName: CAP; Package: CAP-PTH-5MM
footprint CAP-PTH-5MM
pins: 1, 2

## CAPPTH2
designator C?, comment CapacitorStandard 0603 ceramic capacitor, and 0.1" leaded capacitor.
GateName_1: G$1; SymbolName_1: CAP; DeviceName: PTH2; LibraryName: AudioMoth 1.1.0; DeviceSetName: CAP; Package: CAP-PTH-SMALL2
footprint CAP-PTH-SMALL2
pins: 1, 2

## CAPPTH3
designator C?, comment CapacitorStandard 0603 ceramic capacitor, and 0.1" leaded capacitor.
GateName_1: G$1; SymbolName_1: CAP; DeviceName: PTH3; LibraryName: AudioMoth 1.1.0; DeviceSetName: CAP; Package: CAP-PTH-LARGE
footprint CAP-PTH-LARGE
pins: 1, 2

## CAPSMD
designator C?, comment CapacitorStandard 0603 ceramic capacitor, and 0.1" leaded capacitor.
GateName_1: G$1; SymbolName_1: CAP; DeviceName: SMD; LibraryName: AudioMoth 1.1.0; DeviceSetName: CAP; Package: GRM43D
footprint GRM43D
pins: A 1, C 2

## CRYSTAL5X3
designator Y?, comment Various standard crystals. Proven footprints.
GateName_1: G$1; SymbolName_1: Q; DeviceName: 5X3; PROD_ID: XTAL-08218; LibraryName: AudioMoth 1.1.0; DeviceSetName: CRYSTAL; Package: CRYSTAL-SMD-5X3
footprint CRYSTAL-SMD-5X3
pins: 1, 3 2

## CRYSTAL10.5X4.8
designator Y?, comment Various standard crystals. Proven footprints.
GateName_1: G$1; SymbolName_1: Q; DeviceName: 10.5X4.8; LibraryName: AudioMoth 1.1.0; DeviceSetName: CRYSTAL; Package: CRYSTAL-SMD-10.5X4.8-2PIN
footprint CRYSTAL-SMD-10.5X4.8-2PIN
pins: P$1 1, P$2 2

## CRYSTAL32-SMD
designator Y?, comment Various standard crystals. Proven footprints.
GateName_1: G$1; SymbolName_1: Q; DeviceName: 32-SMD; PROD_ID: XTAL-07894; LibraryName: AudioMoth 1.1.0; DeviceSetName: CRYSTAL; Package: CRYSTAL-32KHZ-SMD
footprint CRYSTAL-32KHZ-SMD
pins: X1 1, X2 2

## CRYSTALEPSONMC146
designator Y?, comment Various standard crystals. Proven footprints.
GateName_1: G$1; SymbolName_1: Q; DeviceName: EPSONMC146; LibraryName: AudioMoth 1.1.0; DeviceSetName: CRYSTAL; Package: CRYSTAL-32KHZ-SMD_EPSON_MC146
footprint CRYSTAL-32KHZ-SMD_EPSON_MC146
pins: P$1 2, P$2 1

## CRYSTALHC49US
designator Y?, comment Various standard crystals. Proven footprints.
GateName_1: G$1; SymbolName_1: Q; DeviceName: HC49US; LibraryName: AudioMoth 1.1.0; DeviceSetName: CRYSTAL; Package: HC49US
footprint HC49US
pins: 1, 2

## CRYSTALHC49UV
designator Y?, comment Various standard crystals. Proven footprints.
GateName_1: G$1; SymbolName_1: Q; DeviceName: HC49UV; LibraryName: AudioMoth 1.1.0; DeviceSetName: CRYSTAL; Package: HC49U-V
footprint HC49U-V
pins: 1, 2

## CRYSTALSMD
designator Y?, comment Various standard crystals. Proven footprints.
GateName_1: G$1; SymbolName_1: Q; DeviceName: SMD; LibraryName: AudioMoth 1.1.0; DeviceSetName: CRYSTAL; Package: HC49UP
footprint HC49UP
pins: 1, 2

## CRYSTALTC26H
designator Y?, comment Various standard crystals. Proven footprints.
GateName_1: G$1; SymbolName_1: Q; DeviceName: TC26H; PROD_ID: XTAL-10112; LibraryName: AudioMoth 1.1.0; DeviceSetName: CRYSTAL; Package: TC26H
footprint TC26H
pins: 1, 2

## CRYSTALTC26H_EZ
designator Y?, comment Various standard crystals. Proven footprints.
GateName_1: G$1; SymbolName_1: Q; DeviceName: TC26H_EZ; LibraryName: AudioMoth 1.1.0; DeviceSetName: CRYSTAL; Package: TC26HEZ
footprint TC26HEZ
pins: 1, 2

## CRYSTALTC38H
designator Y?, comment Various standard crystals. Proven footprints.
GateName_1: G$1; SymbolName_1: Q; DeviceName: TC38H; LibraryName: AudioMoth 1.1.0; DeviceSetName: CRYSTAL; Package: TC38H
footprint TC38H
pins: 1, 2

## CRYSTALTXC-7A
designator Y?, comment Various standard crystals. Proven footprints.
GateName_1: G$1; SymbolName_1: Q; DeviceName: TXC-7A; LibraryName: AudioMoth 1.1.0; DeviceSetName: CRYSTAL; Package: CRYSTAL-TXC-7A
footprint CRYSTAL-TXC-7A
pins: P$1 1, P$2 2

## CT10-XXXX-CSS131
designator SW?, comment CT10 Series Molded Switch   Source: www.cotorelay.com .. Coto_Technology__CT10-1530-G1.pdf
GateName_1: G$1; SymbolName_1: SWITCH-NO; DeviceName: CSS131; DeviceSetName: CT10-XXXX-; LibraryName: AudioMoth 1.1.0; Package: CT10-XXXX-G4
footprint CT10-XXXX-G4
pins: 1 3, 2 1, 4, ?1 2

## CT10-XXXX-G4
designator SW?, comment CT10 Series Molded Switch   Source: www.cotorelay.com .. Coto_Technology__CT10-1530-G1.pdf
GateName_1: G$1; SymbolName_1: SWITCH-NO; DeviceName: G4; DeviceSetName: CT10-XXXX-; LibraryName: AudioMoth 1.1.0; Package: CT10-XXXX-G4
footprint CT10-XXXX-G4
pins: 1 3, 2 1, ?1 2, ?2 4

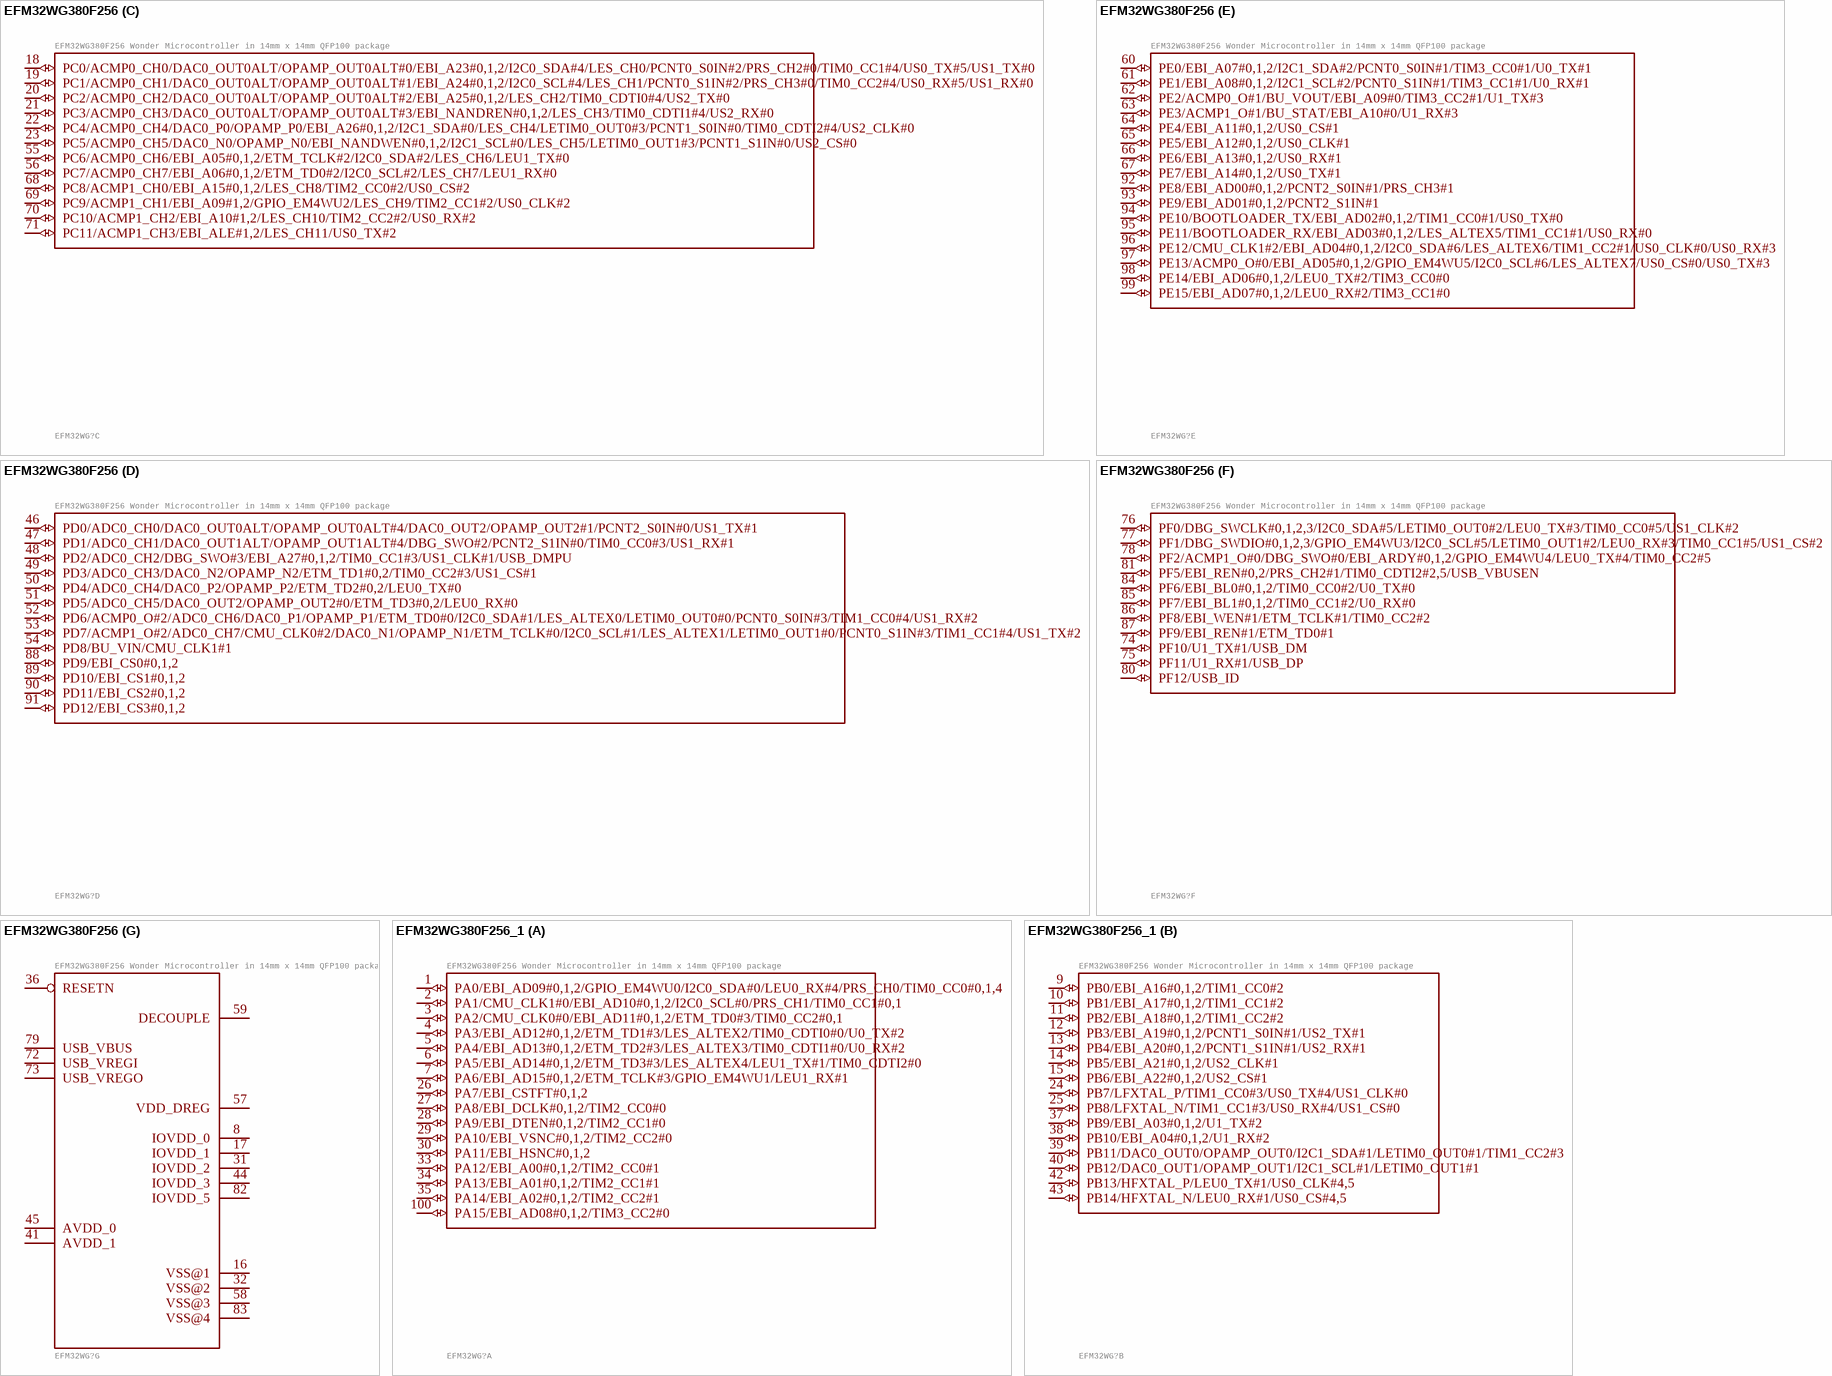
[diagram p4: symbols EFM32WG380F256 to EFM32WG380F256_1]

## EFM32WG380F256
designator EFM32WG?, comment EFM32WG380F256 Wonder Microcontroller in 14mm x 14mm QFP100 package
GateName_1: A; SymbolName_1: EFM32WG380F256_A; GateName_2: B; SymbolName_2: EFM32WG380F256_B; GateName_3: C; SymbolName_3: EFM32WG380F256_C; GateName_4: D; SymbolName_4: EFM32WG380F256_D; GateName_5: E; SymbolName_5: EFM32WG380F256_E; GateName_6: F; SymbolName_6: EFM32WG380F256_F; GateName_7: PWR; SymbolName_7: EFM32WG380F256_PWR; LibraryName: AudioMoth 1.1.0; DeviceSetName: EFM32WG380F256; Package: QFP100
footprint QFP100
part A pins: 1 PA0/EBI_AD09#0,1,2/GPIO_EM4WU0/I2C0_SDA#0/LEU0_RX#4/PRS_CH0/TIM0_CC0#0,1,4 (io), 2 PA1/CMU_CLK1#0/EBI_AD10#0,1,2/I2C0_SCL#0/PRS_CH1/TIM0_CC1#0,1 (io), 3 PA2/CMU_CLK0#0/EBI_AD11#0,1,2/ETM_TD0#3/TIM0_CC2#0,1 (io), 4 PA3/EBI_AD12#0,1,2/ETM_TD1#3/LES_ALTEX2/TIM0_CDTI0#0/U0_TX#2 (io), 5 PA4/EBI_AD13#0,1,2/ETM_TD2#3/LES_ALTEX3/TIM0_CDTI1#0/U0_RX#2 (io), 6 PA5/EBI_AD14#0,1,2/ETM_TD3#3/LES_ALTEX4/LEU1_TX#1/TIM0_CDTI2#0 (io), 7 PA6/EBI_AD15#0,1,2/ETM_TCLK#3/GPIO_EM4WU1/LEU1_RX#1 (io), 26 PA7/EBI_CSTFT#0,1,2 (io), 27 PA8/EBI_DCLK#0,1,2/TIM2_CC0#0 (io), 28 PA9/EBI_DTEN#0,1,2/TIM2_CC1#0 (io), 29 PA10/EBI_VSNC#0,1,2/TIM2_CC2#0 (io), 30 PA11/EBI_HSNC#0,1,2 (io), 33 PA12/EBI_A00#0,1,2/TIM2_CC0#1 (io), 34 PA13/EBI_A01#0,1,2/TIM2_CC1#1 (io), 35 PA14/EBI_A02#0,1,2/TIM2_CC2#1 (io), 100 PA15/EBI_AD08#0,1,2/TIM3_CC2#0 (io)
part B pins: 9 PB0/EBI_A16#0,1,2/TIM1_CC0#2 (io), 10 PB1/EBI_A17#0,1,2/TIM1_CC1#2 (io), 11 PB2/EBI_A18#0,1,2/TIM1_CC2#2 (io), 12 PB3/EBI_A19#0,1,2/PCNT1_S0IN#1/US2_TX#1 (io), 13 PB4/EBI_A20#0,1,2/PCNT1_S1IN#1/US2_RX#1 (io), 14 PB5/EBI_A21#0,1,2/US2_CLK#1 (io), 15 PB6/EBI_A22#0,1,2/US2_CS#1 (io), 24 PB7/LFXTAL_P/TIM1_CC0#3/US0_TX#4/US1_CLK#0 (io), 25 PB8/LFXTAL_N/TIM1_CC1#3/US0_RX#4/US1_CS#0 (io), 37 PB9/EBI_A03#0,1,2/U1_TX#2 (io), 38 PB10/EBI_A04#0,1,2/U1_RX#2 (io), 39 PB11/DAC0_OUT0/OPAMP_OUT0/I2C1_SDA#1/LETIM0_OUT0#1/TIM1_CC2#3 (io), 40 PB12/DAC0_OUT1/OPAMP_OUT1/I2C1_SCL#1/LETIM0_OUT1#1 (io), 42 PB13/HFXTAL_P/LEU0_TX#1/US0_CLK#4,5 (io), 43 PB14/HFXTAL_N/LEU0_RX#1/US0_CS#4,5 (io)
part C pins: 18 PC0/ACMP0_CH0/DAC0_OUT0ALT/OPAMP_OUT0ALT#0/EBI_A23#0,1,2/I2C0_SDA#4/LES_CH0/PCNT0_S0IN#2/PRS_CH2#0/TIM0_CC1#4/US0_TX#5/US1_TX#0 (io), 19 PC1/ACMP0_CH1/DAC0_OUT0ALT/OPAMP_OUT0ALT#1/EBI_A24#0,1,2/I2C0_SCL#4/LES_CH1/PCNT0_S1IN#2/PRS_CH3#0/TIM0_CC2#4/US0_RX#5/US1_RX#0 (io), 20 PC2/ACMP0_CH2/DAC0_OUT0ALT/OPAMP_OUT0ALT#2/EBI_A25#0,1,2/LES_CH2/TIM0_CDTI0#4/US2_TX#0 (io), 21 PC3/ACMP0_CH3/DAC0_OUT0ALT/OPAMP_OUT0ALT#3/EBI_NANDREN#0,1,2/LES_CH3/TIM0_CDTI1#4/US2_RX#0 (io), 22 PC4/ACMP0_CH4/DAC0_P0/OPAMP_P0/EBI_A26#0,1,2/I2C1_SDA#0/LES_CH4/LETIM0_OUT0#3/PCNT1_S0IN#0/TIM0_CDTI2#4/US2_CLK#0 (io), 23 PC5/ACMP0_CH5/DAC0_N0/OPAMP_N0/EBI_NANDWEN#0,1,2/I2C1_SCL#0/LES_CH5/LETIM0_OUT1#3/PCNT1_S1IN#0/US2_CS#0 (io), 55 PC6/ACMP0_CH6/EBI_A05#0,1,2/ETM_TCLK#2/I2C0_SDA#2/LES_CH6/LEU1_TX#0 (io), 56 PC7/ACMP0_CH7/EBI_A06#0,1,2/ETM_TD0#2/I2C0_SCL#2/LES_CH7/LEU1_RX#0 (io), 68 PC8/ACMP1_CH0/EBI_A15#0,1,2/LES_CH8/TIM2_CC0#2/US0_CS#2 (io), 69 PC9/ACMP1_CH1/EBI_A09#1,2/GPIO_EM4WU2/LES_CH9/TIM2_CC1#2/US0_CLK#2 (io), 70 PC10/ACMP1_CH2/EBI_A10#1,2/LES_CH10/TIM2_CC2#2/US0_RX#2 (io), 71 PC11/ACMP1_CH3/EBI_ALE#1,2/LES_CH11/US0_TX#2 (io)
part D pins: 46 PD0/ADC0_CH0/DAC0_OUT0ALT/OPAMP_OUT0ALT#4/DAC0_OUT2/OPAMP_OUT2#1/PCNT2_S0IN#0/US1_TX#1 (io), 47 PD1/ADC0_CH1/DAC0_OUT1ALT/OPAMP_OUT1ALT#4/DBG_SWO#2/PCNT2_S1IN#0/TIM0_CC0#3/US1_RX#1 (io), 48 PD2/ADC0_CH2/DBG_SWO#3/EBI_A27#0,1,2/TIM0_CC1#3/US1_CLK#1/USB_DMPU (io), 49 PD3/ADC0_CH3/DAC0_N2/OPAMP_N2/ETM_TD1#0,2/TIM0_CC2#3/US1_CS#1 (io), 50 PD4/ADC0_CH4/DAC0_P2/OPAMP_P2/ETM_TD2#0,2/LEU0_TX#0 (io), 51 PD5/ADC0_CH5/DAC0_OUT2/OPAMP_OUT2#0/ETM_TD3#0,2/LEU0_RX#0 (io), 52 PD6/ACMP0_O#2/ADC0_CH6/DAC0_P1/OPAMP_P1/ETM_TD0#0/I2C0_SDA#1/LES_ALTEX0/LETIM0_OUT0#0/PCNT0_S0IN#3/TIM1_CC0#4/US1_RX#2 (io), 53 PD7/ACMP1_O#2/ADC0_CH7/CMU_CLK0#2/DAC0_N1/OPAMP_N1/ETM_TCLK#0/I2C0_SCL#1/LES_ALTEX1/LETIM0_OUT1#0/PCNT0_S1IN#3/TIM1_CC1#4/US1_TX#2 (io), 54 PD8/BU_VIN/CMU_CLK1#1 (io), 88 PD9/EBI_CS0#0,1,2 (io), 89 PD10/EBI_CS1#0,1,2 (io), 90 PD11/EBI_CS2#0,1,2 (io), 91 PD12/EBI_CS3#0,1,2 (io)
part E pins: 60 PE0/EBI_A07#0,1,2/I2C1_SDA#2/PCNT0_S0IN#1/TIM3_CC0#1/U0_TX#1 (io), 61 PE1/EBI_A08#0,1,2/I2C1_SCL#2/PCNT0_S1IN#1/TIM3_CC1#1/U0_RX#1 (io), 62 PE2/ACMP0_O#1/BU_VOUT/EBI_A09#0/TIM3_CC2#1/U1_TX#3 (io), 63 PE3/ACMP1_O#1/BU_STAT/EBI_A10#0/U1_RX#3 (io), 64 PE4/EBI_A11#0,1,2/US0_CS#1 (io), 65 PE5/EBI_A12#0,1,2/US0_CLK#1 (io), 66 PE6/EBI_A13#0,1,2/US0_RX#1 (io), 67 PE7/EBI_A14#0,1,2/US0_TX#1 (io), 92 PE8/EBI_AD00#0,1,2/PCNT2_S0IN#1/PRS_CH3#1 (io), 93 PE9/EBI_AD01#0,1,2/PCNT2_S1IN#1 (io), 94 PE10/BOOTLOADER_TX/EBI_AD02#0,1,2/TIM1_CC0#1/US0_TX#0 (io), 95 PE11/BOOTLOADER_RX/EBI_AD03#0,1,2/LES_ALTEX5/TIM1_CC1#1/US0_RX#0 (io), 96 PE12/CMU_CLK1#2/EBI_AD04#0,1,2/I2C0_SDA#6/LES_ALTEX6/TIM1_CC2#1/US0_CLK#0/US0_RX#3 (io), 97 PE13/ACMP0_O#0/EBI_AD05#0,1,2/GPIO_EM4WU5/I2C0_SCL#6/LES_ALTEX7/US0_CS#0/US0_TX#3 (io), 98 PE14/EBI_AD06#0,1,2/LEU0_TX#2/TIM3_CC0#0 (io), 99 PE15/EBI_AD07#0,1,2/LEU0_RX#2/TIM3_CC1#0 (io)
part F pins: 74 PF10/U1_TX#1/USB_DM (io), 75 PF11/U1_RX#1/USB_DP (io), 76 PF0/DBG_SWCLK#0,1,2,3/I2C0_SDA#5/LETIM0_OUT0#2/LEU0_TX#3/TIM0_CC0#5/US1_CLK#2 (io), 77 PF1/DBG_SWDIO#0,1,2,3/GPIO_EM4WU3/I2C0_SCL#5/LETIM0_OUT1#2/LEU0_RX#3/TIM0_CC1#5/US1_CS#2 (io), 78 PF2/ACMP1_O#0/DBG_SWO#0/EBI_ARDY#0,1,2/GPIO_EM4WU4/LEU0_TX#4/TIM0_CC2#5 (io), 80 PF12/USB_ID (io), 81 PF5/EBI_REN#0,2/PRS_CH2#1/TIM0_CDTI2#2,5/USB_VBUSEN (io), 84 PF6/EBI_BL0#0,1,2/TIM0_CC0#2/U0_TX#0 (io), 85 PF7/EBI_BL1#0,1,2/TIM0_CC1#2/U0_RX#0 (io), 86 PF8/EBI_WEN#1/ETM_TCLK#1/TIM0_CC2#2 (io), 87 PF9/EBI_REN#1/ETM_TD0#1 (io)
part G pins: 8 IOVDD_0 (power), 16 VSS@1 (power), 17 IOVDD_1 (power), 31 IOVDD_2 (power), 32 VSS@2 (power), 36 RESETN, 41 AVDD_1 (power), 44 IOVDD_3 (power), 45 AVDD_0 (power), 57 VDD_DREG (power), 58 VSS@3 (power), 59 DECOUPLE (power), 72 USB_VREGI (power), 73 USB_VREGO (power), 79 USB_VBUS (power), 82 IOVDD_5 (power), 83 VSS@4 (power)

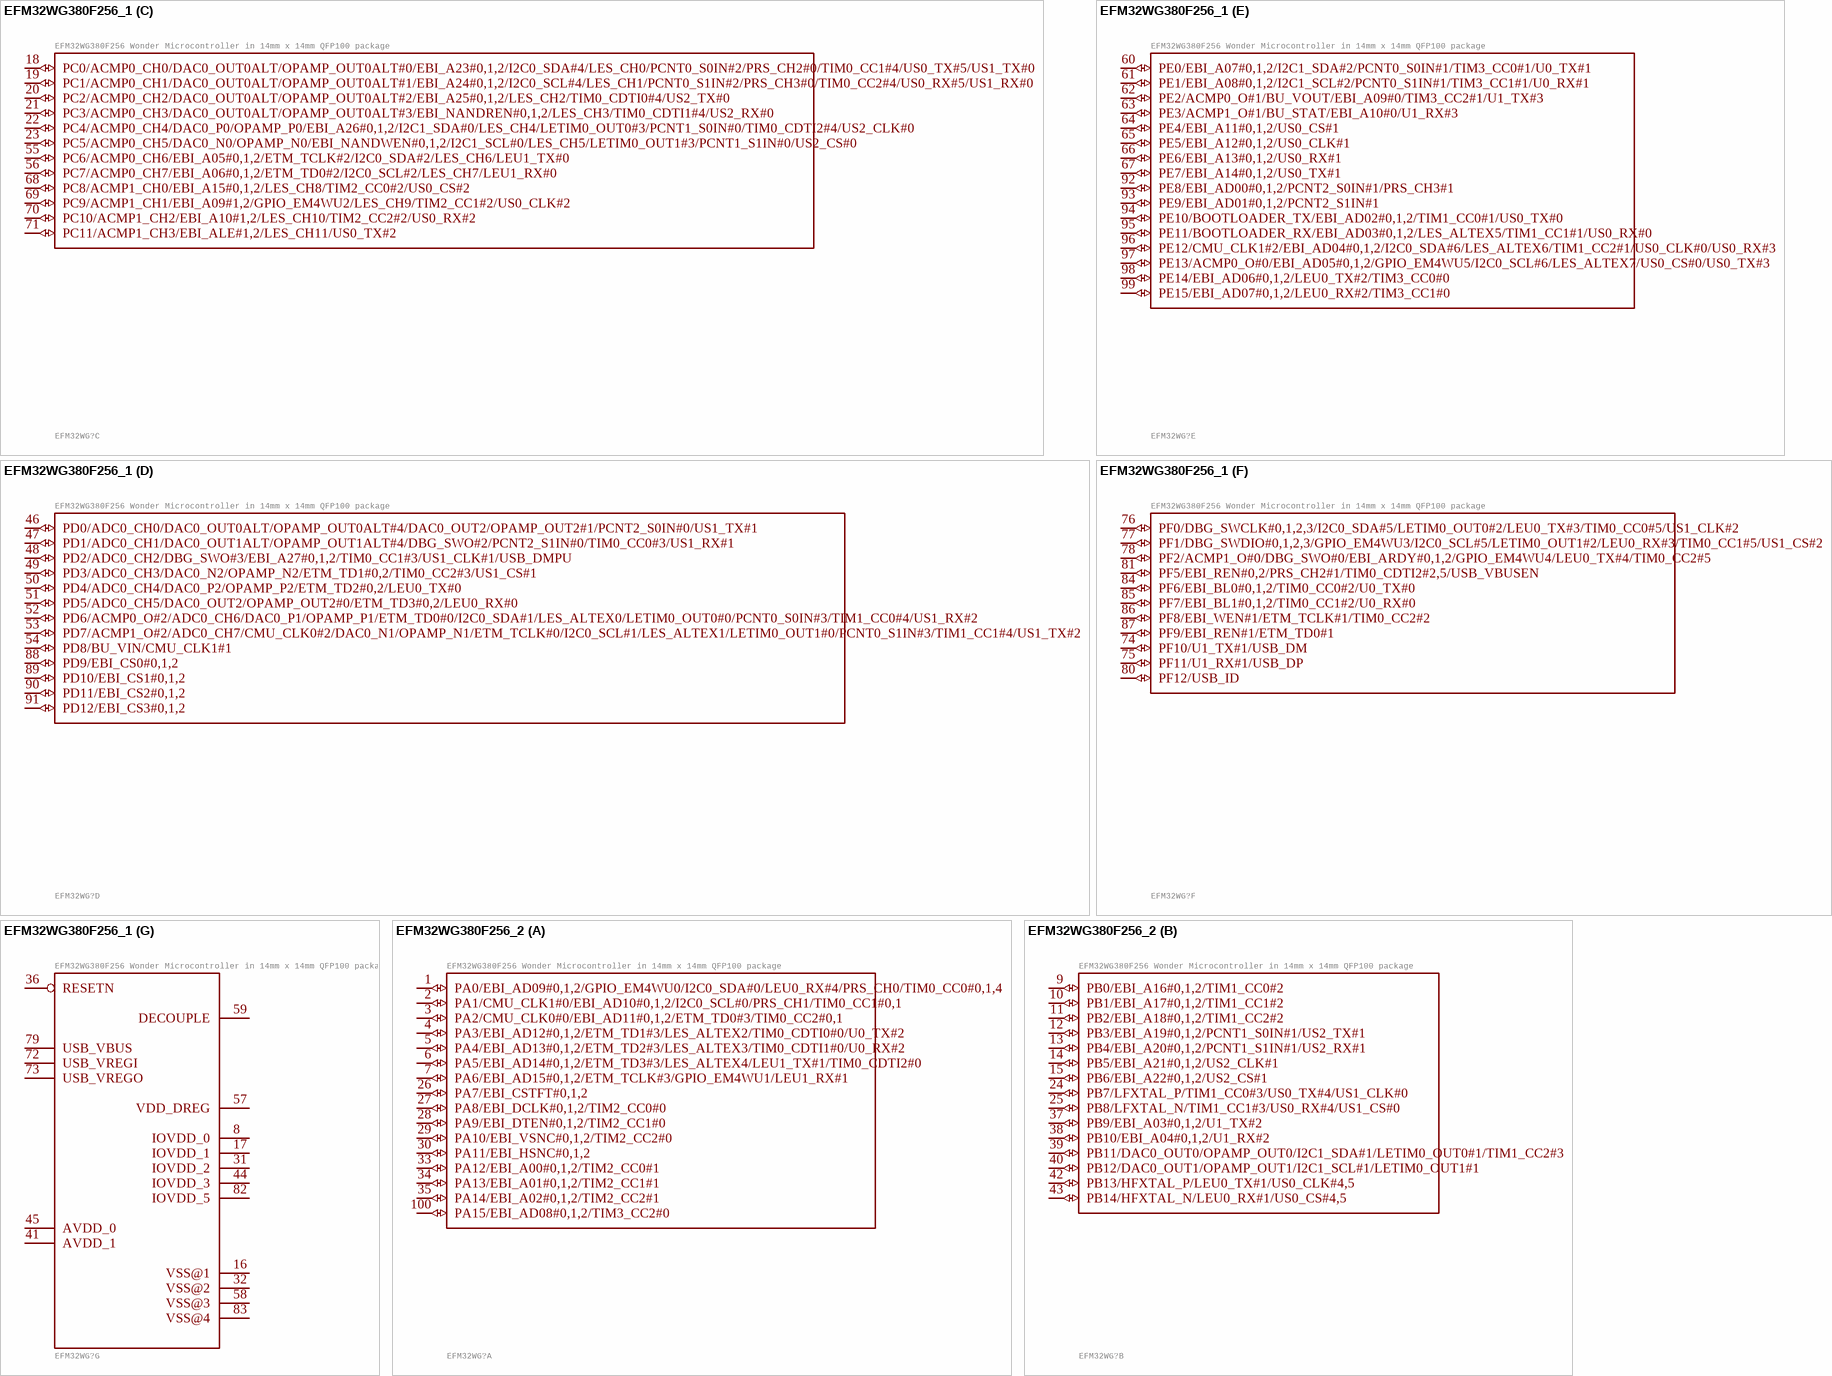
[diagram p5: symbols EFM32WG380F256_1 to EFM32WG380F256_2]

## EFM32WG380F256_1
designator EFM32WG?, comment EFM32WG380F256 Wonder Microcontroller in 14mm x 14mm QFP100 package
GateName_1: A; SymbolName_1: EFM32WG380F256_A; GateName_2: B; SymbolName_2: EFM32WG380F256_B; GateName_3: C; SymbolName_3: EFM32WG380F256_C; GateName_4: D; SymbolName_4: EFM32WG380F256_D; GateName_5: E; SymbolName_5: EFM32WG380F256_E; GateName_6: F; SymbolName_6: EFM32WG380F256_F; GateName_7: PWR; SymbolName_7: EFM32WG380F256_PWR; LibraryName: AudioMoth 1.1.0; DeviceSetName: EFM32WG380F256; Package: QFP100
footprint QFP100
part A pins: 1 PA0/EBI_AD09#0,1,2/GPIO_EM4WU0/I2C0_SDA#0/LEU0_RX#4/PRS_CH0/TIM0_CC0#0,1,4 (io), 2 PA1/CMU_CLK1#0/EBI_AD10#0,1,2/I2C0_SCL#0/PRS_CH1/TIM0_CC1#0,1 (io), 3 PA2/CMU_CLK0#0/EBI_AD11#0,1,2/ETM_TD0#3/TIM0_CC2#0,1 (io), 4 PA3/EBI_AD12#0,1,2/ETM_TD1#3/LES_ALTEX2/TIM0_CDTI0#0/U0_TX#2 (io), 5 PA4/EBI_AD13#0,1,2/ETM_TD2#3/LES_ALTEX3/TIM0_CDTI1#0/U0_RX#2 (io), 6 PA5/EBI_AD14#0,1,2/ETM_TD3#3/LES_ALTEX4/LEU1_TX#1/TIM0_CDTI2#0 (io), 7 PA6/EBI_AD15#0,1,2/ETM_TCLK#3/GPIO_EM4WU1/LEU1_RX#1 (io), 26 PA7/EBI_CSTFT#0,1,2 (io), 27 PA8/EBI_DCLK#0,1,2/TIM2_CC0#0 (io), 28 PA9/EBI_DTEN#0,1,2/TIM2_CC1#0 (io), 29 PA10/EBI_VSNC#0,1,2/TIM2_CC2#0 (io), 30 PA11/EBI_HSNC#0,1,2 (io), 33 PA12/EBI_A00#0,1,2/TIM2_CC0#1 (io), 34 PA13/EBI_A01#0,1,2/TIM2_CC1#1 (io), 35 PA14/EBI_A02#0,1,2/TIM2_CC2#1 (io), 100 PA15/EBI_AD08#0,1,2/TIM3_CC2#0 (io)
part B pins: 9 PB0/EBI_A16#0,1,2/TIM1_CC0#2 (io), 10 PB1/EBI_A17#0,1,2/TIM1_CC1#2 (io), 11 PB2/EBI_A18#0,1,2/TIM1_CC2#2 (io), 12 PB3/EBI_A19#0,1,2/PCNT1_S0IN#1/US2_TX#1 (io), 13 PB4/EBI_A20#0,1,2/PCNT1_S1IN#1/US2_RX#1 (io), 14 PB5/EBI_A21#0,1,2/US2_CLK#1 (io), 15 PB6/EBI_A22#0,1,2/US2_CS#1 (io), 24 PB7/LFXTAL_P/TIM1_CC0#3/US0_TX#4/US1_CLK#0 (io), 25 PB8/LFXTAL_N/TIM1_CC1#3/US0_RX#4/US1_CS#0 (io), 37 PB9/EBI_A03#0,1,2/U1_TX#2 (io), 38 PB10/EBI_A04#0,1,2/U1_RX#2 (io), 39 PB11/DAC0_OUT0/OPAMP_OUT0/I2C1_SDA#1/LETIM0_OUT0#1/TIM1_CC2#3 (io), 40 PB12/DAC0_OUT1/OPAMP_OUT1/I2C1_SCL#1/LETIM0_OUT1#1 (io), 42 PB13/HFXTAL_P/LEU0_TX#1/US0_CLK#4,5 (io), 43 PB14/HFXTAL_N/LEU0_RX#1/US0_CS#4,5 (io)
part C pins: 18 PC0/ACMP0_CH0/DAC0_OUT0ALT/OPAMP_OUT0ALT#0/EBI_A23#0,1,2/I2C0_SDA#4/LES_CH0/PCNT0_S0IN#2/PRS_CH2#0/TIM0_CC1#4/US0_TX#5/US1_TX#0 (io), 19 PC1/ACMP0_CH1/DAC0_OUT0ALT/OPAMP_OUT0ALT#1/EBI_A24#0,1,2/I2C0_SCL#4/LES_CH1/PCNT0_S1IN#2/PRS_CH3#0/TIM0_CC2#4/US0_RX#5/US1_RX#0 (io), 20 PC2/ACMP0_CH2/DAC0_OUT0ALT/OPAMP_OUT0ALT#2/EBI_A25#0,1,2/LES_CH2/TIM0_CDTI0#4/US2_TX#0 (io), 21 PC3/ACMP0_CH3/DAC0_OUT0ALT/OPAMP_OUT0ALT#3/EBI_NANDREN#0,1,2/LES_CH3/TIM0_CDTI1#4/US2_RX#0 (io), 22 PC4/ACMP0_CH4/DAC0_P0/OPAMP_P0/EBI_A26#0,1,2/I2C1_SDA#0/LES_CH4/LETIM0_OUT0#3/PCNT1_S0IN#0/TIM0_CDTI2#4/US2_CLK#0 (io), 23 PC5/ACMP0_CH5/DAC0_N0/OPAMP_N0/EBI_NANDWEN#0,1,2/I2C1_SCL#0/LES_CH5/LETIM0_OUT1#3/PCNT1_S1IN#0/US2_CS#0 (io), 55 PC6/ACMP0_CH6/EBI_A05#0,1,2/ETM_TCLK#2/I2C0_SDA#2/LES_CH6/LEU1_TX#0 (io), 56 PC7/ACMP0_CH7/EBI_A06#0,1,2/ETM_TD0#2/I2C0_SCL#2/LES_CH7/LEU1_RX#0 (io), 68 PC8/ACMP1_CH0/EBI_A15#0,1,2/LES_CH8/TIM2_CC0#2/US0_CS#2 (io), 69 PC9/ACMP1_CH1/EBI_A09#1,2/GPIO_EM4WU2/LES_CH9/TIM2_CC1#2/US0_CLK#2 (io), 70 PC10/ACMP1_CH2/EBI_A10#1,2/LES_CH10/TIM2_CC2#2/US0_RX#2 (io), 71 PC11/ACMP1_CH3/EBI_ALE#1,2/LES_CH11/US0_TX#2 (io)
part D pins: 46 PD0/ADC0_CH0/DAC0_OUT0ALT/OPAMP_OUT0ALT#4/DAC0_OUT2/OPAMP_OUT2#1/PCNT2_S0IN#0/US1_TX#1 (io), 47 PD1/ADC0_CH1/DAC0_OUT1ALT/OPAMP_OUT1ALT#4/DBG_SWO#2/PCNT2_S1IN#0/TIM0_CC0#3/US1_RX#1 (io), 48 PD2/ADC0_CH2/DBG_SWO#3/EBI_A27#0,1,2/TIM0_CC1#3/US1_CLK#1/USB_DMPU (io), 49 PD3/ADC0_CH3/DAC0_N2/OPAMP_N2/ETM_TD1#0,2/TIM0_CC2#3/US1_CS#1 (io), 50 PD4/ADC0_CH4/DAC0_P2/OPAMP_P2/ETM_TD2#0,2/LEU0_TX#0 (io), 51 PD5/ADC0_CH5/DAC0_OUT2/OPAMP_OUT2#0/ETM_TD3#0,2/LEU0_RX#0 (io), 52 PD6/ACMP0_O#2/ADC0_CH6/DAC0_P1/OPAMP_P1/ETM_TD0#0/I2C0_SDA#1/LES_ALTEX0/LETIM0_OUT0#0/PCNT0_S0IN#3/TIM1_CC0#4/US1_RX#2 (io), 53 PD7/ACMP1_O#2/ADC0_CH7/CMU_CLK0#2/DAC0_N1/OPAMP_N1/ETM_TCLK#0/I2C0_SCL#1/LES_ALTEX1/LETIM0_OUT1#0/PCNT0_S1IN#3/TIM1_CC1#4/US1_TX#2 (io), 54 PD8/BU_VIN/CMU_CLK1#1 (io), 88 PD9/EBI_CS0#0,1,2 (io), 89 PD10/EBI_CS1#0,1,2 (io), 90 PD11/EBI_CS2#0,1,2 (io), 91 PD12/EBI_CS3#0,1,2 (io)
part E pins: 60 PE0/EBI_A07#0,1,2/I2C1_SDA#2/PCNT0_S0IN#1/TIM3_CC0#1/U0_TX#1 (io), 61 PE1/EBI_A08#0,1,2/I2C1_SCL#2/PCNT0_S1IN#1/TIM3_CC1#1/U0_RX#1 (io), 62 PE2/ACMP0_O#1/BU_VOUT/EBI_A09#0/TIM3_CC2#1/U1_TX#3 (io), 63 PE3/ACMP1_O#1/BU_STAT/EBI_A10#0/U1_RX#3 (io), 64 PE4/EBI_A11#0,1,2/US0_CS#1 (io), 65 PE5/EBI_A12#0,1,2/US0_CLK#1 (io), 66 PE6/EBI_A13#0,1,2/US0_RX#1 (io), 67 PE7/EBI_A14#0,1,2/US0_TX#1 (io), 92 PE8/EBI_AD00#0,1,2/PCNT2_S0IN#1/PRS_CH3#1 (io), 93 PE9/EBI_AD01#0,1,2/PCNT2_S1IN#1 (io), 94 PE10/BOOTLOADER_TX/EBI_AD02#0,1,2/TIM1_CC0#1/US0_TX#0 (io), 95 PE11/BOOTLOADER_RX/EBI_AD03#0,1,2/LES_ALTEX5/TIM1_CC1#1/US0_RX#0 (io), 96 PE12/CMU_CLK1#2/EBI_AD04#0,1,2/I2C0_SDA#6/LES_ALTEX6/TIM1_CC2#1/US0_CLK#0/US0_RX#3 (io), 97 PE13/ACMP0_O#0/EBI_AD05#0,1,2/GPIO_EM4WU5/I2C0_SCL#6/LES_ALTEX7/US0_CS#0/US0_TX#3 (io), 98 PE14/EBI_AD06#0,1,2/LEU0_TX#2/TIM3_CC0#0 (io), 99 PE15/EBI_AD07#0,1,2/LEU0_RX#2/TIM3_CC1#0 (io)
part F pins: 74 PF10/U1_TX#1/USB_DM (io), 75 PF11/U1_RX#1/USB_DP (io), 76 PF0/DBG_SWCLK#0,1,2,3/I2C0_SDA#5/LETIM0_OUT0#2/LEU0_TX#3/TIM0_CC0#5/US1_CLK#2 (io), 77 PF1/DBG_SWDIO#0,1,2,3/GPIO_EM4WU3/I2C0_SCL#5/LETIM0_OUT1#2/LEU0_RX#3/TIM0_CC1#5/US1_CS#2 (io), 78 PF2/ACMP1_O#0/DBG_SWO#0/EBI_ARDY#0,1,2/GPIO_EM4WU4/LEU0_TX#4/TIM0_CC2#5 (io), 80 PF12/USB_ID (io), 81 PF5/EBI_REN#0,2/PRS_CH2#1/TIM0_CDTI2#2,5/USB_VBUSEN (io), 84 PF6/EBI_BL0#0,1,2/TIM0_CC0#2/U0_TX#0 (io), 85 PF7/EBI_BL1#0,1,2/TIM0_CC1#2/U0_RX#0 (io), 86 PF8/EBI_WEN#1/ETM_TCLK#1/TIM0_CC2#2 (io), 87 PF9/EBI_REN#1/ETM_TD0#1 (io)
part G pins: 8 IOVDD_0 (power), 16 VSS@1 (power), 17 IOVDD_1 (power), 31 IOVDD_2 (power), 32 VSS@2 (power), 36 RESETN, 41 AVDD_1 (power), 44 IOVDD_3 (power), 45 AVDD_0 (power), 57 VDD_DREG (power), 58 VSS@3 (power), 59 DECOUPLE (power), 72 USB_VREGI (power), 73 USB_VREGO (power), 79 USB_VBUS (power), 82 IOVDD_5 (power), 83 VSS@4 (power)

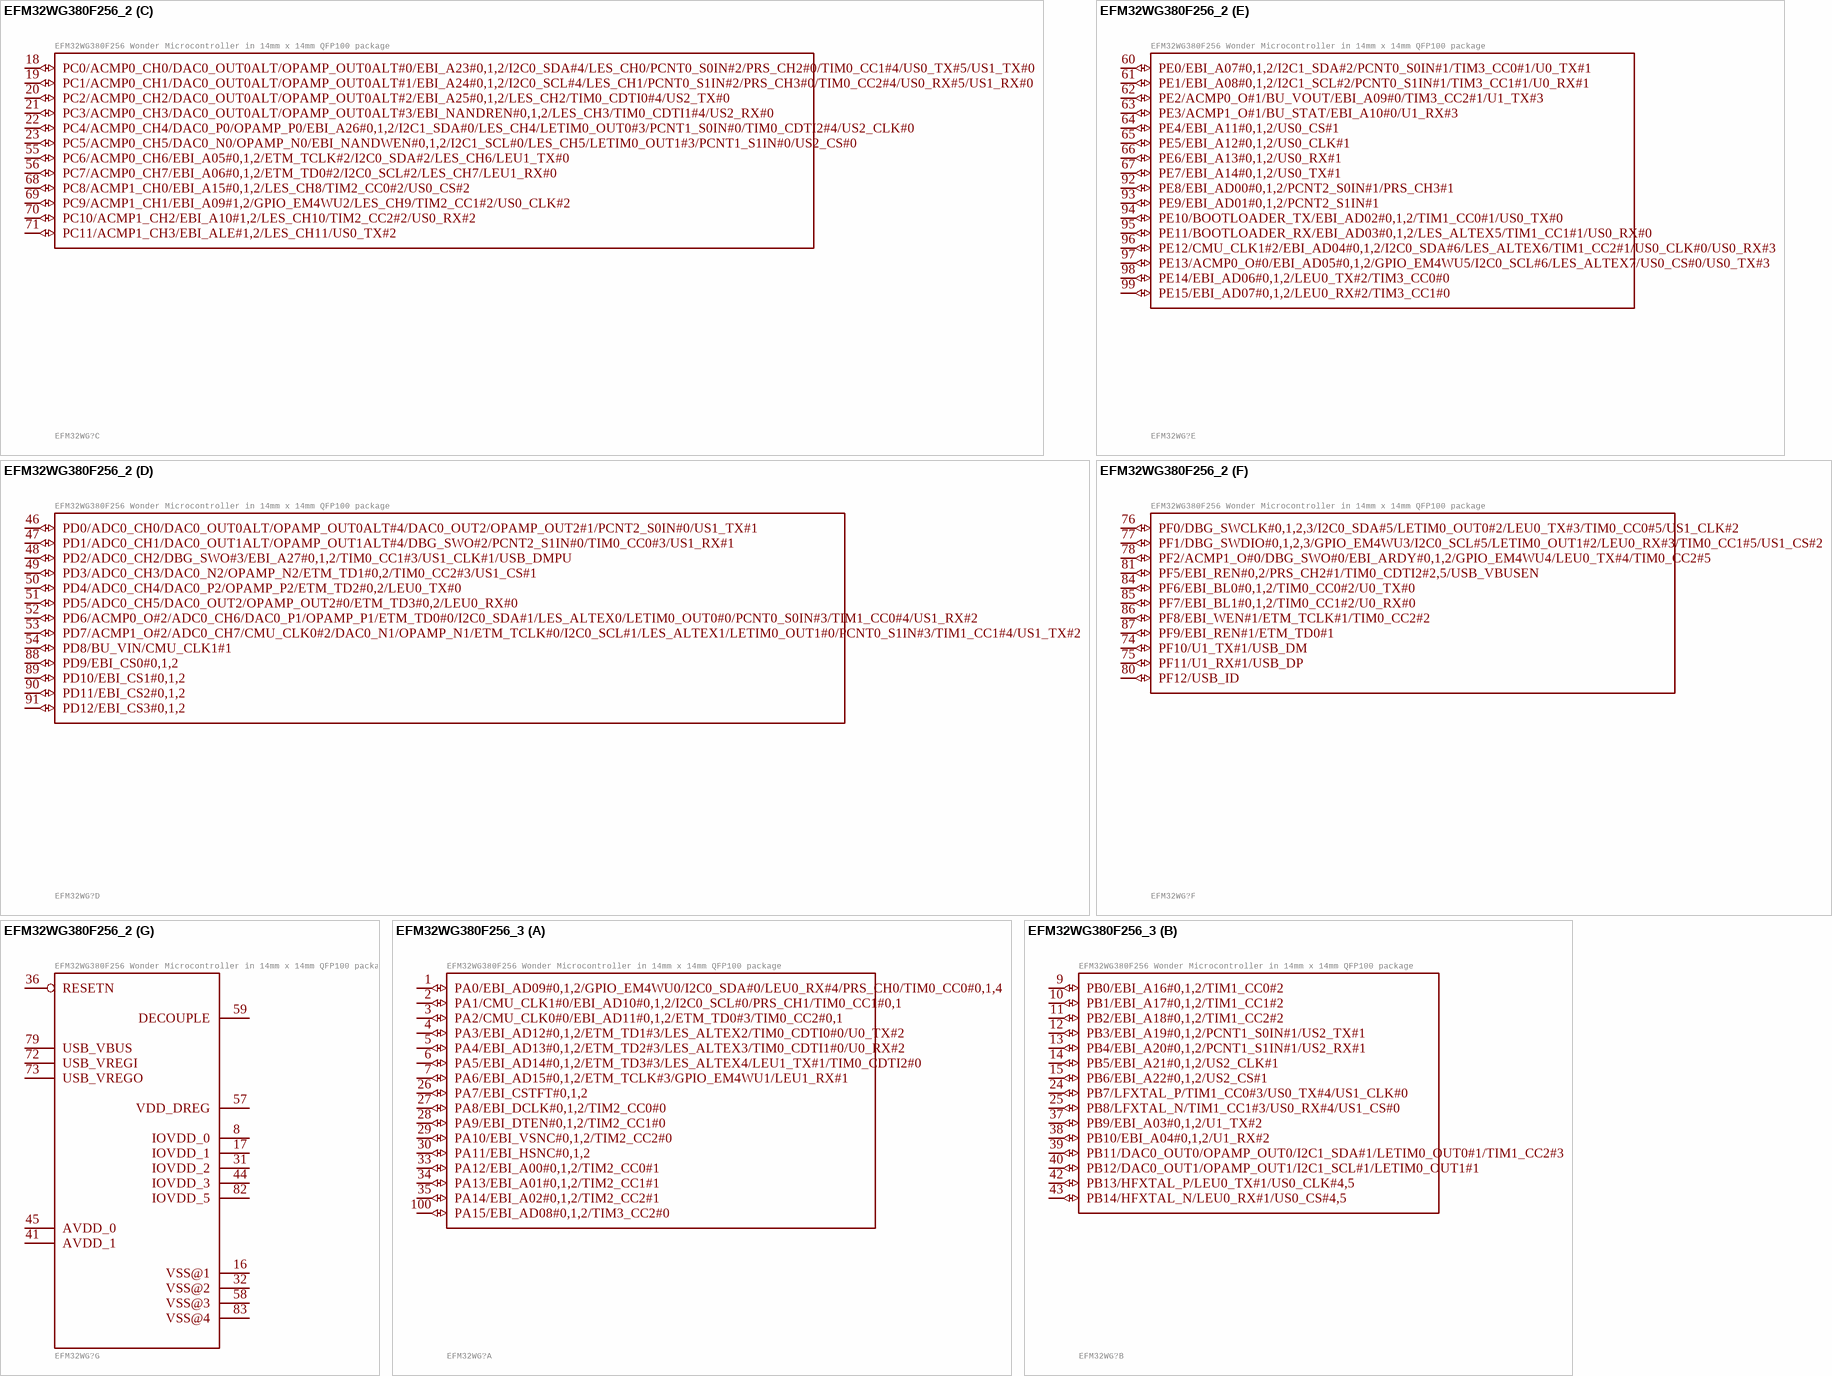
[diagram p6: symbols EFM32WG380F256_2 to EFM32WG380F256_3]